# Altium integrated library Ali-padash.IntLib: 1012 symbols (part 2 of 5)
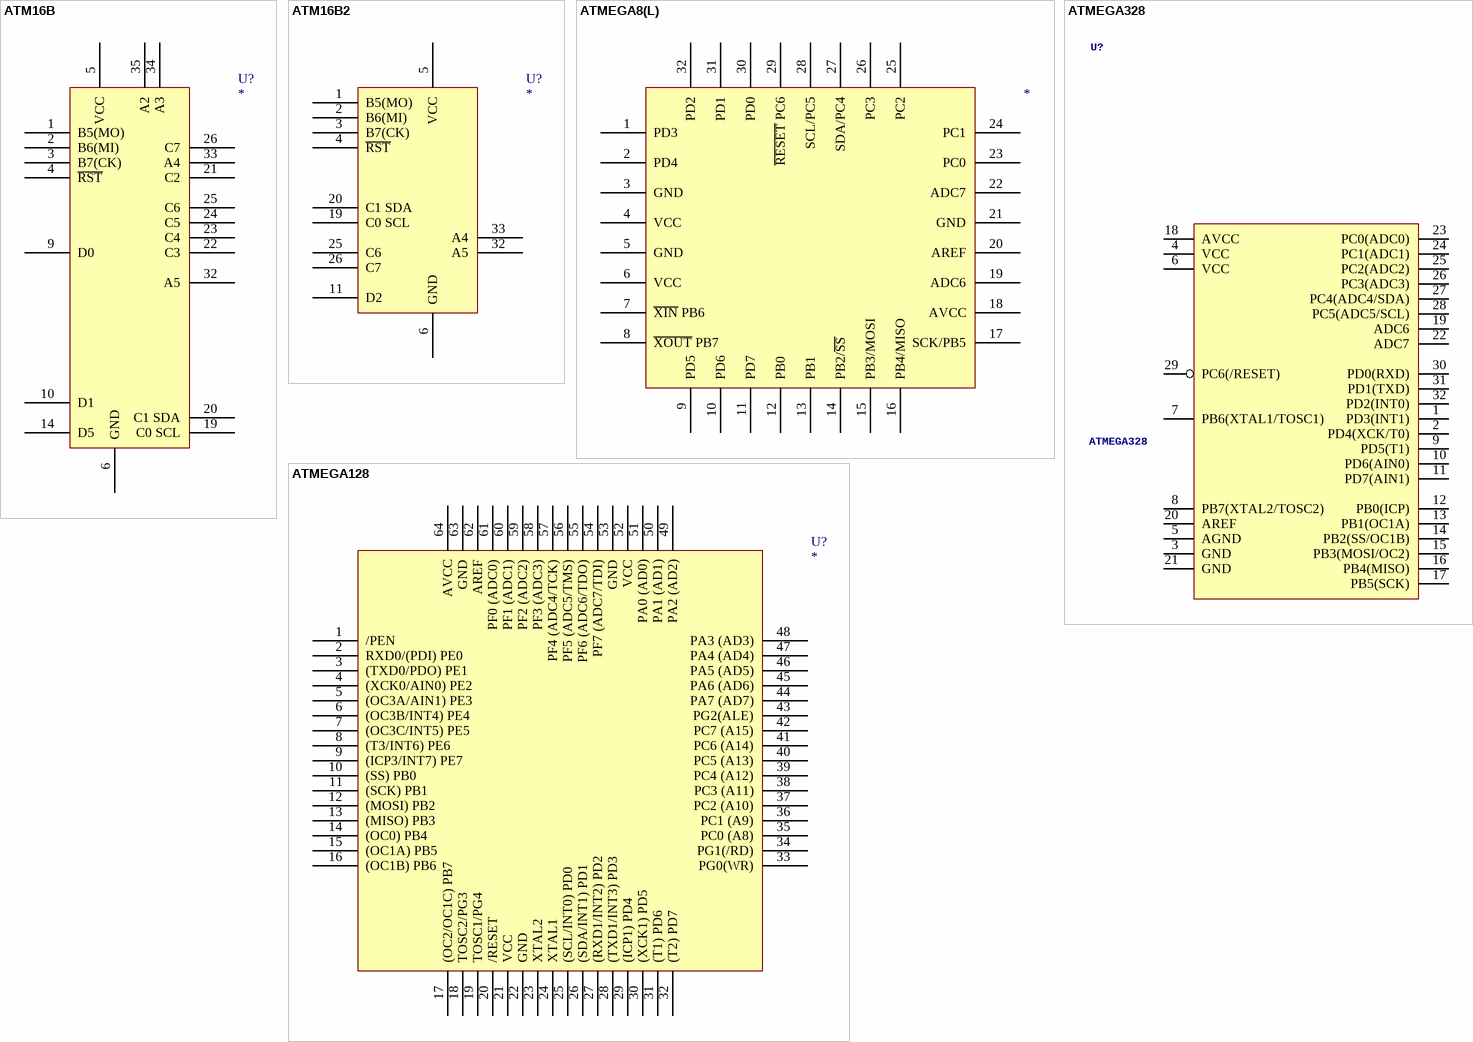
[diagram p80: symbols ATM16B to ATMEGA328]

## ATM16B
designator U?
footprint 44A
pins: 1 B5(MO), 2 B6(MI), 3 B7(CK), 4 ~{RST}, 5 VCC, 6 GND, 9 D0, 10 D1, 14 D5, 19 C0 SCL, 20 C1 SDA, 21 C2, 22 C3, 23 C4, 24 C5, 25 C6, 26 C7, 32 A5, 33 A4, 34 A3, 35 A2

## ATM16B2
designator U?
footprint 44A
pins: 1 B5(MO), 2 B6(MI), 3 B7(CK), 4 ~{RST}, 5 VCC, 6 GND, 11 D2, 19 C0 SCL, 20 C1 SDA, 25 C6, 26 C7, 32 A5, 33 A4

## ATMEGA8(L)
designator ?
U?
footprint TQFP32
pins: 1 PD3, 2 PD4, 3 GND, 4 VCC, 5 GND, 6 VCC, 7 ~{XIN} PB6, 8 ~{XOUT} PB7, 9 PD5, 10 PD6, 11 PD7, 12 PB0, 13 PB1, 14 PB2/~{SS}, 15 PB3/MOSI, 16 PB4/MISO, 17 SCK/PB5, 18 AVCC, 19 ADC6, 20 AREF, 21 GND, 22 ADC7, 23 PC0, 24 PC1, 25 PC2, 26 PC3, 27 SDA/PC4, 28 SCL/PC5, 29 ~{RESET} PC6, 30 PD0, 31 PD1, 32 PD2

## ATMEGA128
designator U?
footprint 64A
pins: 1 /PEN, 2 RXD0/(PDI) PE0, 3 (TXD0/PDO) PE1, 4 (XCK0/AIN0) PE2, 5 (OC3A/AIN1) PE3, 6 (OC3B/INT4) PE4, 7 (OC3C/INT5) PE5, 8 (T3/INT6) PE6, 9 (ICP3/INT7) PE7, 10 (SS) PB0, 11 (SCK) PB1, 12 (MOSI) PB2, 13 (MISO) PB3, 14 (OC0) PB4, 15 (OC1A) PB5, 16 (OC1B) PB6, 17 (OC2/OC1C) PB7, 18 TOSC2/PG3, 19 TOSC1/PG4, 20 /RESET, 21 VCC, 22 GND, 23 XTAL2, 24 XTAL1, 25 (SCL/INT0) PD0, 26 (SDA/INT1) PD1, 27 (RXD1/INT2) PD2, 28 (TXD1/INT3) PD3, 29 (ICP1) PD4, 30 (XCK1) PD5, 31 (T1) PD6, 32 (T2) PD7, 33 PG0(WR), 34 PG1(/RD), 35 PC0 (A8), 36 PC1 (A9), 37 PC2 (A10), 38 PC3 (A11), 39 PC4 (A12), 40 PC5 (A13), 41 PC6 (A14), 42 PC7 (A15), 43 PG2(ALE), 44 PA7 (AD7), 45 PA6 (AD6), 46 PA5 (AD5), 47 PA4 (AD4), 48 PA3 (AD3), 49 PA2 (AD2), 50 PA1 (AD1), 51 PA0 (AD0), 52 VCC, 53 GND, 54 PF7 (ADC7/TDI), 55 PF6 (ADC6/TDO), 56 PF5 (ADC5/TMS), 57 PF4 (ADC4/TCK), 58 PF3 (ADC3), 59 PF2 (ADC2), 60 PF1 (ADC1), 61 PF0 (ADC0), 62 AREF, 63 GND, 64 AVCC

## ATMEGA328
designator U?
footprint TQFP32-08
pins: 1 PD3(INT1), 2 PD4(XCK/T0), 3 GND, 4 VCC, 5 AGND, 6 VCC, 7 PB6(XTAL1/TOSC1), 8 PB7(XTAL2/TOSC2), 9 PD5(T1), 10 PD6(AIN0), 11 PD7(AIN1), 12 PB0(ICP), 13 PB1(OC1A), 14 PB2(SS/OC1B), 15 PB3(MOSI/OC2), 16 PB4(MISO), 17 PB5(SCK), 18 AVCC, 19 ADC6, 20 AREF, 21 GND, 22 ADC7, 23 PC0(ADC0), 24 PC1(ADC1), 25 PC2(ADC2), 26 PC3(ADC3), 27 PC4(ADC4/SDA), 28 PC5(ADC5/SCL), 29 PC6(/RESET), 30 PD0(RXD), 31 PD1(TXD), 32 PD2(INT0)

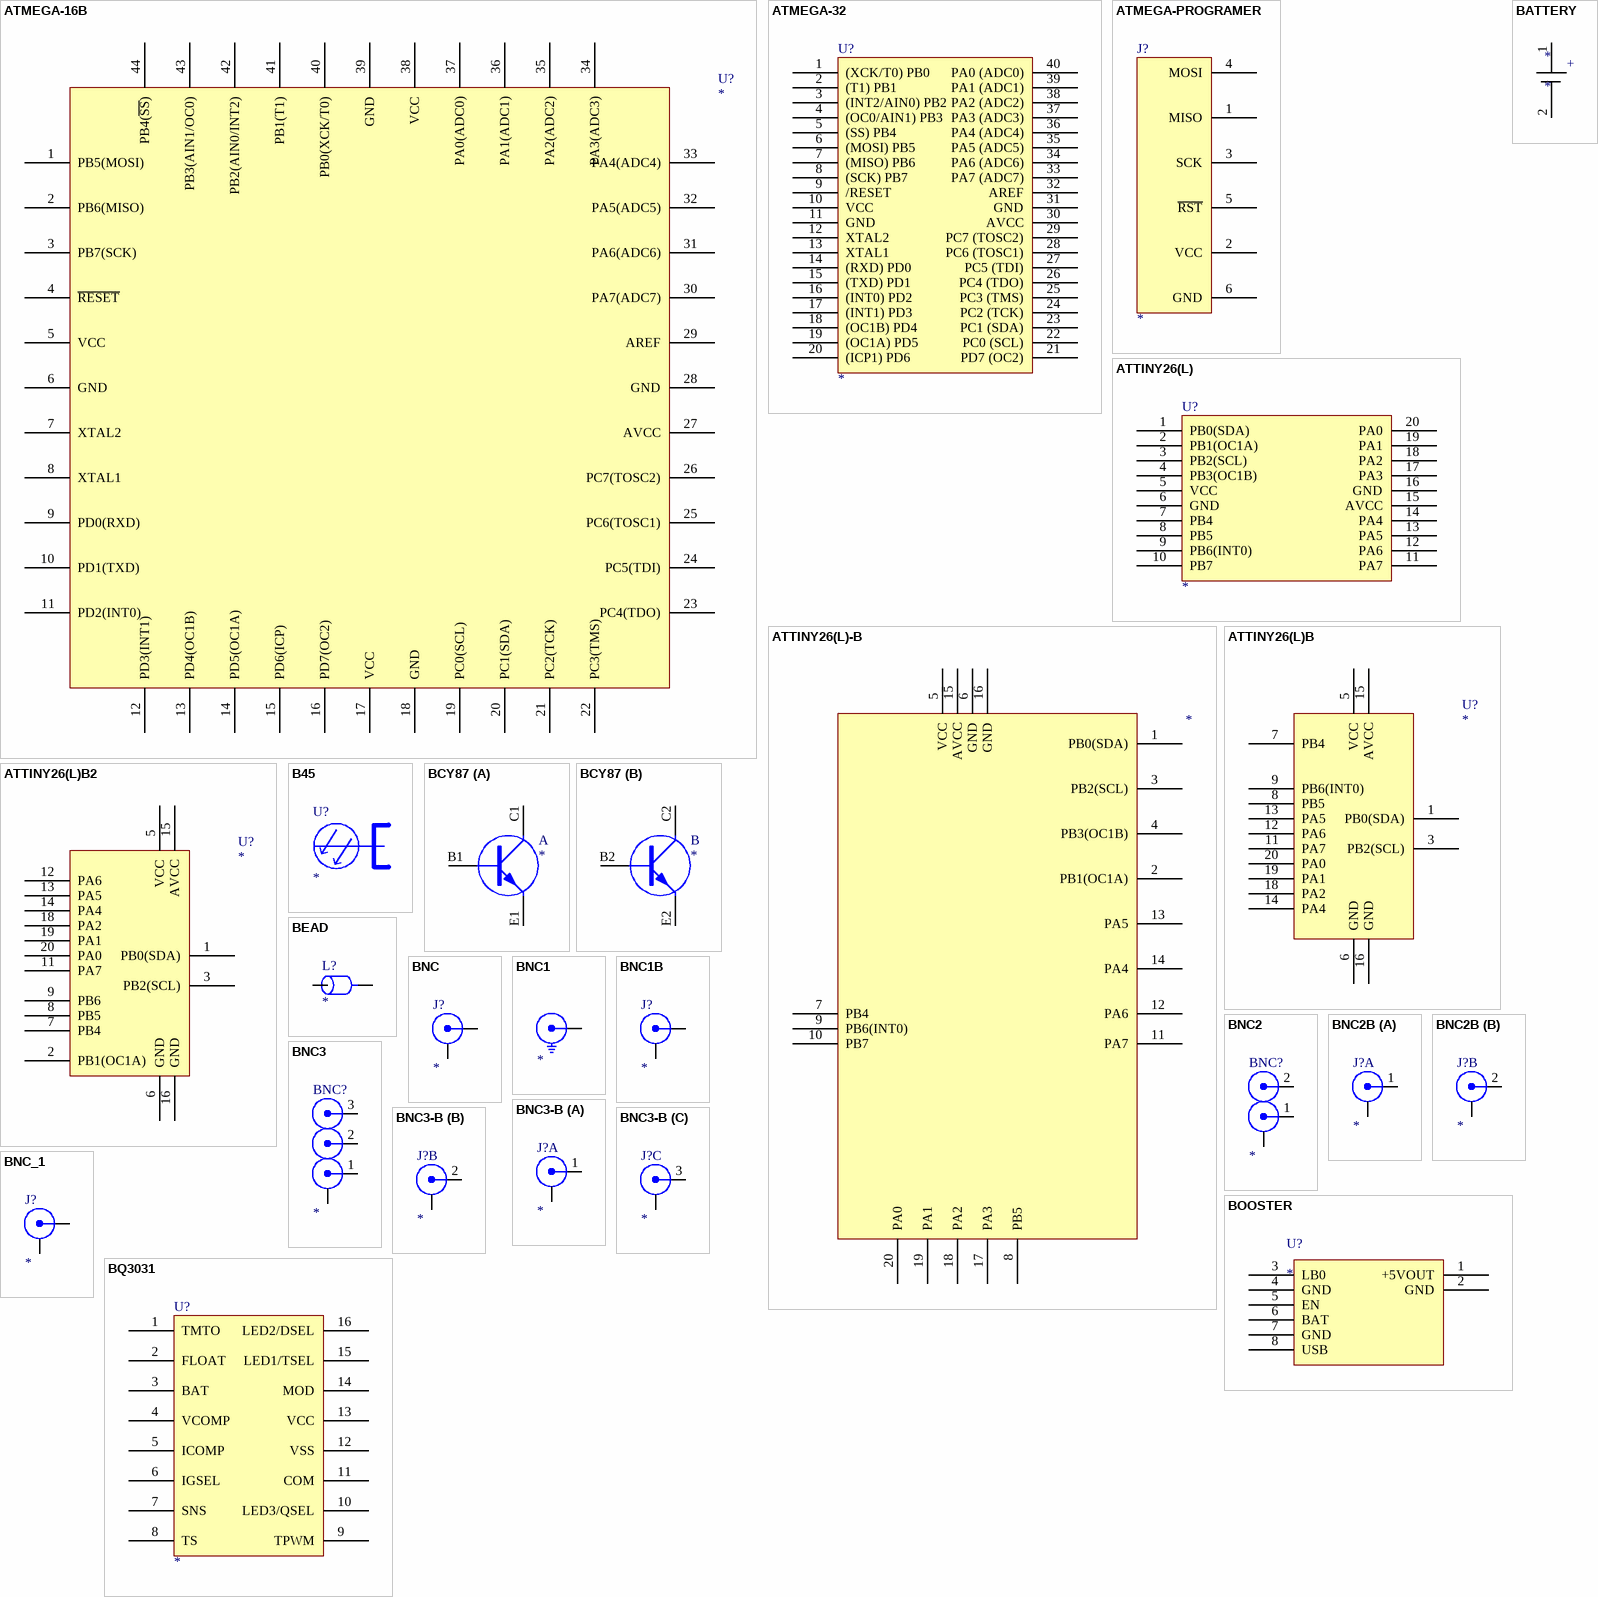
[diagram p16: symbols ATMEGA-16B to BQ3031]

## ATMEGA-16B
designator U?
footprint TQFP44
pins: 1 PB5(MOSI), 2 PB6(MISO), 3 PB7(SCK), 4 ~{RESET}, 5 VCC, 6 GND, 7 XTAL2, 8 XTAL1, 9 PD0(RXD), 10 PD1(TXD), 11 PD2(INT0), 12 PD3(INT1), 13 PD4(OC1B), 14 PD5(OC1A), 15 PD6(ICP), 16 PD7(OC2), 17 VCC, 18 GND, 19 PC0(SCL), 20 PC1(SDA), 21 PC2(TCK), 22 PC3(TMS), 23 PC4(TDO), 24 PC5(TDI), 25 PC6(TOSC1), 26 PC7(TOSC2), 27 AVCC, 28 GND, 29 AREF, 30 PA7(ADC7), 31 PA6(ADC6), 32 PA5(ADC5), 33 PA4(ADC4), 34 PA3(ADC3), 35 PA2(ADC2), 36 PA1(ADC1), 37 PA0(ADC0), 38 VCC, 39 GND, 40 PB0(XCK/T0), 41 PB1(T1), 42 PB2(AIN0/INT2), 43 PB3(AIN1/OC0), 44 PB4(~{SS})

## ATMEGA-32
designator U?
footprint DIP40
pins: 1 (XCK/T0) PB0, 2 (T1) PB1, 3 (INT2/AIN0) PB2, 4 (OC0/AIN1) PB3, 5 (SS) PB4, 6 (MOSI) PB5, 7 (MISO) PB6, 8 (SCK) PB7, 9 /RESET, 10 VCC, 11 GND, 12 XTAL2, 13 XTAL1, 14 (RXD) PD0, 15 (TXD) PD1, 16 (INT0) PD2, 17 (INT1) PD3, 18 (OC1B) PD4, 19 (OC1A) PD5, 20 (ICP1) PD6, 21 PD7 (OC2), 22 PC0 (SCL), 23 PC1 (SDA), 24 PC2 (TCK), 25 PC3 (TMS), 26 PC4 (TDO), 27 PC5 (TDI), 28 PC6 (TOSC1), 29 PC7 (TOSC2), 30 AVCC, 31 GND, 32 AREF, 33 PA7 (ADC7), 34 PA6 (ADC6), 35 PA5 (ADC5), 36 PA4 (ADC4), 37 PA3 (ADC3), 38 PA2 (ADC2), 39 PA1 (ADC1), 40 PA0 (ADC0)

## ATMEGA-PROGRAMER
designator J?
footprint CON6/CON
pins: 1 MISO, 2 VCC, 3 SCK, 4 MOSI, 5 ~{RST}, 6 GND

## ATTINY26(L)
designator U?
footprint DIP20
pins: 1 PB0(SDA), 2 PB1(OC1A), 3 PB2(SCL), 4 PB3(OC1B), 5 VCC, 6 GND, 7 PB4, 8 PB5, 9 PB6(INT0), 10 PB7, 11 PA7, 12 PA6, 13 PA5, 14 PA4, 15 AVCC, 16 GND, 17 PA3, 18 PA2, 19 PA1, 20 PA0

## ATTINY26(L)-B
designator ?
pins: 1 PB0(SDA), 2 PB1(OC1A), 3 PB2(SCL), 4 PB3(OC1B), 5 VCC, 6 GND, 7 PB4, 8 PB5, 9 PB6(INT0), 10 PB7, 11 PA7, 12 PA6, 13 PA5, 14 PA4, 15 AVCC, 16 GND, 17 PA3, 18 PA2, 19 PA1, 20 PA0

## ATTINY26(L)B
designator U?
footprint DIP20
pins: 1 PB0(SDA), 3 PB2(SCL), 5 VCC, 6 GND, 7 PB4, 8 PB5, 9 PB6(INT0), 11 PA7, 12 PA6, 13 PA5, 14 PA4, 15 AVCC, 16 GND, 18 PA2, 19 PA1, 20 PA0

## ATTINY26(L)B2
designator U?
footprint DIP20
pins: 1 PB0(SDA), 2 PB1(OC1A), 3 PB2(SCL), 5 VCC, 6 GND, 7 PB4, 8 PB5, 9 PB6, 11 PA7, 12 PA6, 13 PA5, 14 PA4, 15 AVCC, 16 GND, 18 PA2, 19 PA1, 20 PA0

## B45
designator U?

## BATTERY
designator *
pins: 1, 2
text: +

## BCY87
designator ?
part A pins: B1 B, C1 C, E1 E
part B pins: B2 B, C2 C, E2 E

## BEAD
designator L?
footprint BEAD
pins: 1, 2

## BNC
designator J?
footprint JAK-BNC3
pins: 1, 2

## BNC1
designator ?
pins: 1, G GND hidden to GND

## BNC1B
designator J?
footprint BNC1-CANARE
pins: 1, G

## BNC2
designator BNC?
footprint BNC2-CANARE
pins: 1, 2, G

## BNC2B
designator J?
footprint BNC2-CANARE
part A pins: 1, G
part B pins: 2, G

## BNC3
designator BNC?
footprint BNC3-CANARE
pins: 1, 2, 3, G

## BNC3-B
designator J?
footprint BNC3-CANARE
part A pins: 1, G
part B pins: 2, G
part C pins: 3, G

## BNC_1
designator J?
footprint JAK-BNC3
pins: 1, 2

## BOOSTER
designator U?
footprint booster
pins: 1 +5VOUT, 2 GND, 3 LB0, 4 GND, 5 EN, 6 BAT, 7 GND, 8 USB

## BQ3031
designator U?
footprint DIP16
footprint SO-16
pins: 1 TMTO, 2 FLOAT, 3 BAT, 4 VCOMP, 5 ICOMP, 6 IGSEL, 7 SNS, 8 TS, 9 TPWM, 10 LED3/QSEL, 11 COM, 12 VSS, 13 VCC, 14 MOD, 15 LED1/TSEL, 16 LED2/DSEL

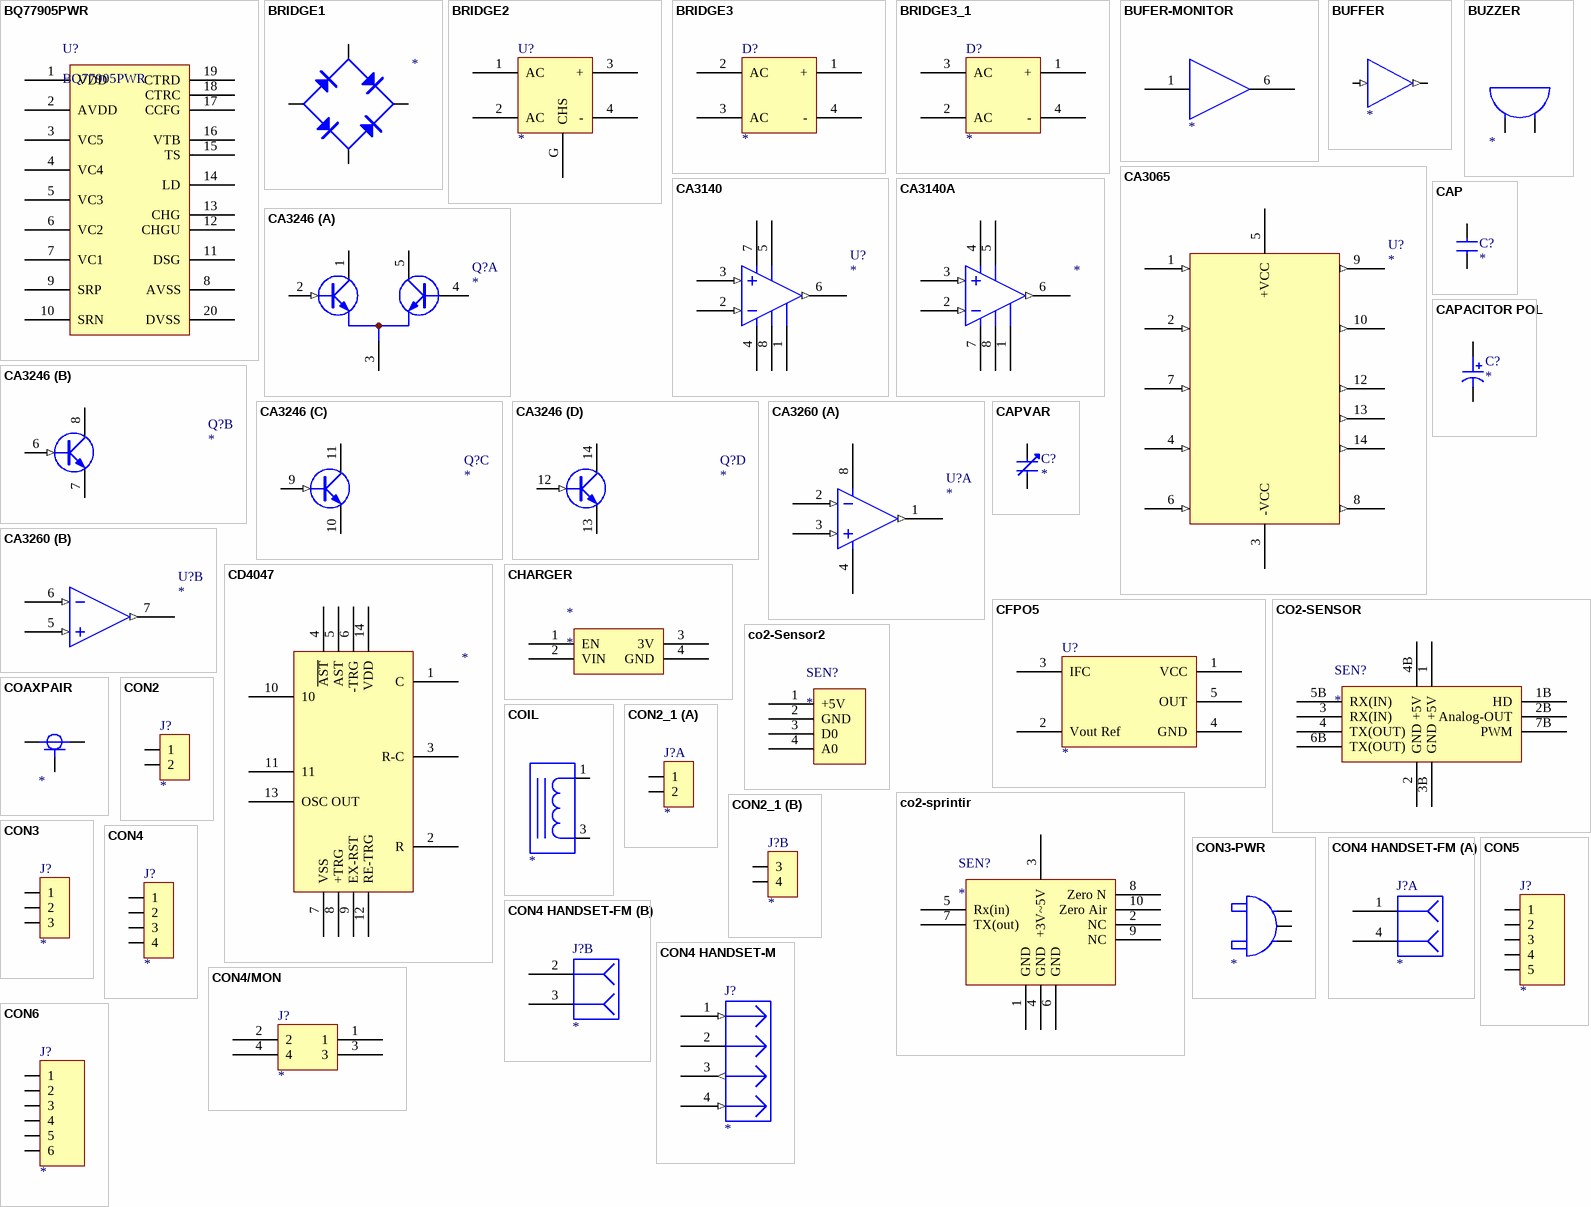
[diagram p17: symbols BQ77905PWR to CON6]

## BQ77905PWR
designator U?
pins: 1 VDD, 2 AVDD, 3 VC5, 4 VC4, 5 VC3, 6 VC2, 7 VC1, 8 AVSS, 9 SRP, 10 SRN, 11 DSG, 12 CHGU, 13 CHG, 14 LD, 15 TS, 16 VTB, 17 CCFG, 18 CTRC, 19 CTRD, 20 DVSS

## BRIDGE1
designator ?
pins: 1, 2, 3, 4

## BRIDGE2
designator U?
footprint BRIDGE
pins: 1 AC, 2 AC, 3 +, 4 -, G CHS

## BRIDGE3
designator D?
footprint BRG-1
pins: 1 +, 2 AC, 3 AC, 4 -

## BRIDGE3_1
designator D?
footprint BRG-1
pins: 1 +, 2 AC, 3 AC, 4 -

## BUFER-MONITOR
designator ?
pins: 1, 2 +12V hidden to +12V, 3 GND hidden to GND, 4 +12V hidden to +12V, 5 GND hidden to GND, 6

## BUFFER
designator ?
pins: 1 (in), 2 (out)

## BUZZER
designator ?
pins: 1, 2

## CA3065
designator U?
pins: 1 (in), 2 (in), 3 -VCC, 4 (in), 5 +VCC, 6 (in), 7 (in), 8 (out), 9 (out), 10 (out), 12 (out), 13 (out), 14 (out)

## CA3140
designator U?
pins: 1 COMP3, 2 -IN (in), 3 +IN (in), 4 V-, 5 COMP1, 6 OUT (out), 7 V+, 8 COMP2

## CA3140A
designator ?
pins: 1 COMP3, 2 -IN (in), 3 +IN (in), 4 V-, 5 COMP1, 6 OUT (out), 7 V+, 8 COMP2

## CA3246
designator Q?
part A pins: 1 C, 2 B (in), 3 E, 4, 5
part B pins: 6 B (in), 7 E, 8 C
part C pins: 9 B (in), 10 E, 11 C
part D pins: 12 B (in), 13 E, 14 C

## CA3260
designator U?
part A pins: 1 OUT (out), 2 -IN (in), 3 +IN (in), 4 V-, 8 V+
part B pins: 5 +IN (in), 6 -IN (in), 7 OUT (out)

## CAP
designator C?
footprint 1005
footprint CAP0.4
footprint 0402
footprint RAD0.
pins: 1, 2

## CAPACITOR POL
designator C?
pins: 1, 2

## CAPVAR
designator C?
footprint TERIMER-2
pins: 1, 2

## CD4047
designator ?
pins: 1 C, 2 R, 3 R-C, 4 ~{AST}, 5 AST, 6 -TRG, 7 VSS, 8 +TRG, 9 EX-RST, 10, 11, 12 RE-TRG, 13 OSC OUT, 14 VDD

## CFPO5
designator U?
footprint VCO-2
pins: 1 VCC, 2 Vout Ref, 3 IFC, 4 GND, 5 OUT

## CHARGER
designator *
footprint LI-ION-CHARGER
pins: 1 EN, 2 VIN, 3 3V, 4 GND

## CO2-SENSOR
designator SEN?
footprint MH-z16 -board
pins: 1 +5V, 1B HD, 2 GND, 2B Analog-OUT, 3 RX(IN), 3B GND, 4 TX(OUT), 4B +5V, 5B RX(IN), 6B TX(OUT), 7B PWM

## co2-Sensor2
designator SEN?
footprint sprinyir
pins: 1 +5V, 2 GND, 3 D0, 4 A0

## co2-sprintir
designator SEN?
footprint sprinyir
pins: 1 GND, 2 NC, 3 +3V~5V, 4 GND, 5 Rx(in), 6 GND, 7 TX(out), 8 Zero N, 9 NC, 10 Zero Air

## COAXPAIR
designator ?
pins: 1, 2, 3

## COIL
designator ?
pins: 1, 3

## CON2
designator J?
pins: 1, 2

## CON2_1
designator J?
part A pins: 1, 2
part B pins: 3, 4

## CON3
designator J?
pins: 1, 2, 3

## CON3-PWR
designator ?
pins: 1, 2, 3

## CON4
designator J?
pins: 1, 2, 3, 4

## CON4 HANDSET-FM
designator J?
part A pins: 1, 4
part B pins: 2, 3

## CON4 HANDSET-M
designator J?
pins: 1 SPK1 (in), 2 -MIC, 3 +MIC (out), 4 SPK2 (in)

## CON4/MON
designator J?
footprint IDC4
pins: 1, 2, 3, 4

## CON5
designator J?
pins: 1, 2, 3, 4, 5

## CON6
designator J?
pins: 1, 2, 3, 4, 5, 6

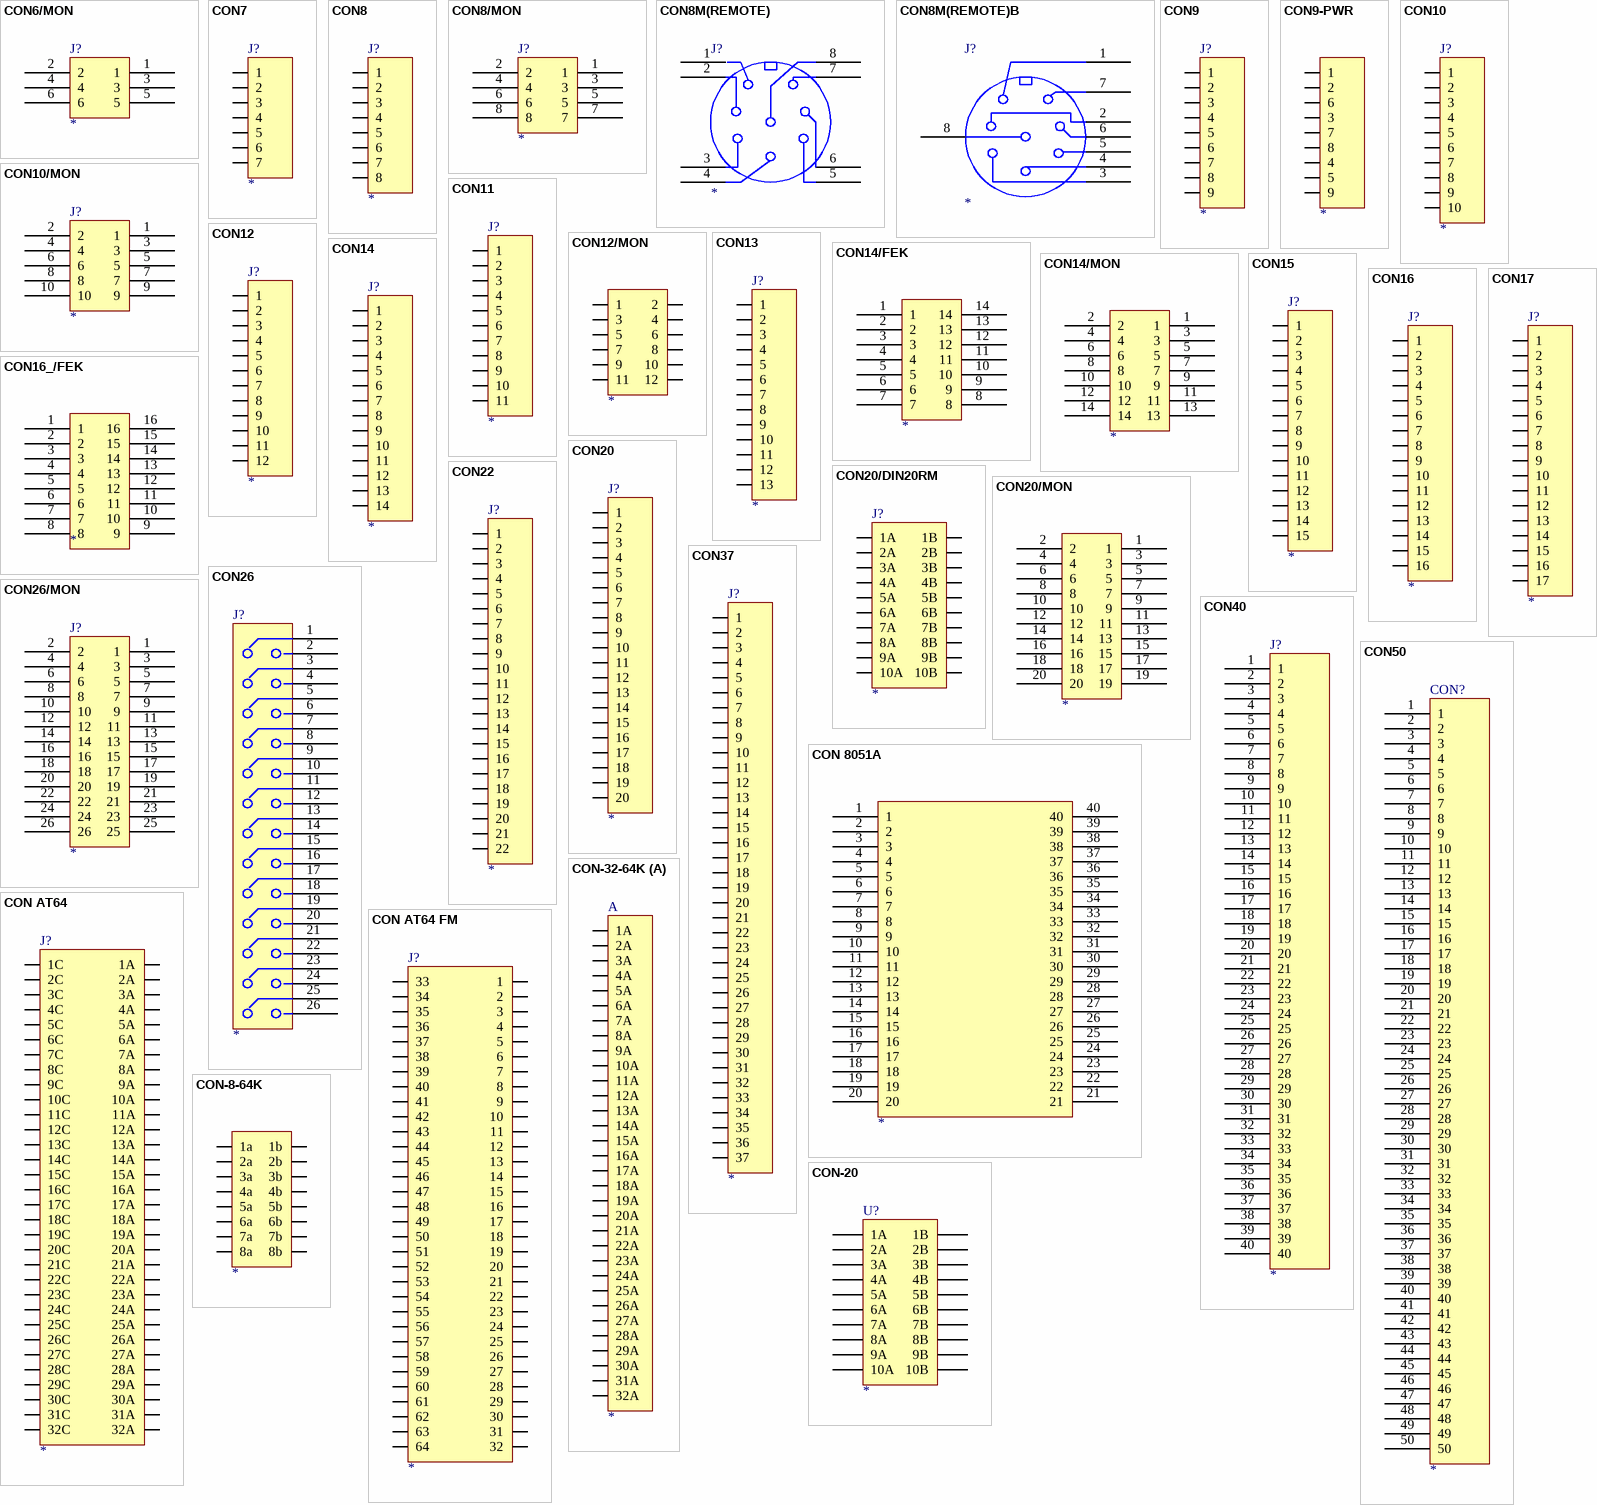
[diagram p18: symbols CON6/MON to CON-32-64K]

## CON6/MON
designator J?
footprint IDC6
pins: 1, 2, 3, 4, 5, 6

## CON7
designator J?
pins: 1, 2, 3, 4, 5, 6, 7

## CON8
designator J?
pins: 1, 2, 3, 4, 5, 6, 7, 8

## CON8/MON
designator J?
footprint IDCF8
pins: 1, 2, 3, 4, 5, 6, 7, 8

## CON8M(REMOTE)
designator J?
footprint CON8M
pins: 1, 2, 3, 4, 5, 6, 7, 8

## CON8M(REMOTE)B
designator J?
footprint CON8M
pins: 1, 2, 3, 4, 5, 6, 7, 8

## CON9
designator J?
pins: 1, 2, 3, 4, 5, 6, 7, 8, 9

## CON9-PWR
designator ?
pins: 1, 2, 3, 4, 5, 6, 7, 8, 9

## CON10
designator J?
pins: 1, 2, 3, 4, 5, 6, 7, 8, 9, 10

## CON10/MON
designator J?
footprint IDC10
pins: 1, 2, 3, 4, 5, 6, 7, 8, 9, 10

## CON11
designator J?
pins: 1, 2, 3, 4, 5, 6, 7, 8, 9, 10, 11

## CON12
designator J?
pins: 1, 2, 3, 4, 5, 6, 7, 8, 9, 10, 11, 12

## CON12/MON
designator ?
pins: 1, 2, 3, 4, 5, 6, 7, 8, 9, 10, 11, 12

## CON13
designator J?
pins: 1, 2, 3, 4, 5, 6, 7, 8, 9, 10, 11, 12, 13

## CON14
designator J?
pins: 1, 2, 3, 4, 5, 6, 7, 8, 9, 10, 11, 12, 13, 14

## CON14/FEK
designator ?
pins: 1, 2, 3, 4, 5, 6, 7, 8, 9, 10, 11, 12, 13, 14

## CON14/MON
designator ?
pins: 1, 2, 3, 4, 5, 6, 7, 8, 9, 10, 11, 12, 13, 14

## CON15
designator J?
pins: 1, 2, 3, 4, 5, 6, 7, 8, 9, 10, 11, 12, 13, 14, 15

## CON16
designator J?
pins: 1, 2, 3, 4, 5, 6, 7, 8, 9, 10, 11, 12, 13, 14, 15, 16

## CON16_/FEK
designator ?
pins: 1, 2, 3, 4, 5, 6, 7, 8, 9, 10, 11, 12, 13, 14, 15, 16

## CON17
designator J?
pins: 1, 2, 3, 4, 5, 6, 7, 8, 9, 10, 11, 12, 13, 14, 15, 16, 17

## CON20
designator J?
pins: 1, 2, 3, 4, 5, 6, 7, 8, 9, 10, 11, 12, 13, 14, 15, 16, 17, 18, 19, 20

## CON20/DIN20RM
designator J?
footprint DIN20RAF
pins: 1A, 1B, 2A, 2B, 3A, 3B, 4A, 4B, 5A, 5B, 6A, 6B, 7A, 7B, 8A, 8B, 9A, 9B, 10A, 10B

## CON20/MON
designator ?
pins: 1, 2, 3, 4, 5, 6, 7, 8, 9, 10, 11, 12, 13, 14, 15, 16, 17, 18, 19, 20

## CON22
designator J?
pins: 1, 2, 3, 4, 5, 6, 7, 8, 9, 10, 11, 12, 13, 14, 15, 16, 17, 18, 19, 20, 21, 22

## CON26
designator J?
footprint IDM26
pins: 1, 2, 3, 4, 5, 6, 7, 8, 9, 10, 11, 12, 13, 14, 15, 16, 17, 18, 19, 20, 21, 22, 23, 24, 25, 26

## CON26/MON
designator J?
footprint IDCF26
pins: 1, 2, 3, 4, 5, 6, 7, 8, 9, 10, 11, 12, 13, 14, 15, 16, 17, 18, 19, 20, 21, 22, 23, 24, 25, 26

## CON37
designator J?
pins: 1, 2, 3, 4, 5, 6, 7, 8, 9, 10, 11, 12, 13, 14, 15, 16, 17, 18, 19, 20, 21, 22, 23, 24, 25, 26, 27, 28, 29, 30, 31, 32, 33, 34, 35, 36, 37

## CON40
designator J?
pins: 1, 2, 3, 4, 5, 6, 7, 8, 9, 10, 11, 12, 13, 14, 15, 16, 17, 18, 19, 20, 21, 22, 23, 24, 25, 26, 27, 28, 29, 30, 31, 32, 33, 34, 35, 36, 37, 38, 39, 40

## CON50
designator CON?
Flat Cable Connector
pins: 1, 2, 3, 4, 5, 6, 7, 8, 9, 10, 11, 12, 13, 14, 15, 16, 17, 18, 19, 20, 21, 22, 23, 24, 25, 26, 27, 28, 29, 30, 31, 32, 33, 34, 35, 36, 37, 38, 39, 40, 41, 42, 43, 44, 45, 46, 47, 48, 49, 50

## CON 8051A
designator ?
pins: 1, 2, 3, 4, 5, 6, 7, 8, 9, 10, 11, 12, 13, 14, 15, 16, 17, 18, 19, 20, 21, 22, 23, 24, 25, 26, 27, 28, 29, 30, 31, 32, 33, 34, 35, 36, 37, 38, 39, 40

## CON AT64
designator J?
pins: 1A, 1C, 2A, 2C, 3A, 3C, 4A, 4C, 5A, 5C, 6A, 6C, 7A, 7C, 8A, 8C, 9A, 9C, 10A, 10C, 11A, 11C, 12A, 12C, 13A, 13C, 14A, 14C, 15A, 15C, 16A, 16C, 17A, 17C, 18A, 18C, 19A, 19C, 20A, 20C, 21A, 21C, 22A, 22C, 23A, 23C, 24A, 24C, 25A, 25C, 26A, 26C, 27A, 27C, 28A, 28C, 29A, 29C, 30A, 30C, 31A, 31C, 32A, 32C

## CON AT64 FM
designator J?
pins: 1, 2, 3, 4, 5, 6, 7, 8, 9, 10, 11, 12, 13, 14, 15, 16, 17, 18, 19, 20, 21, 22, 23, 24, 25, 26, 27, 28, 29, 30, 31, 32, 33, 34, 35, 36, 37, 38, 39, 40, 41, 42, 43, 44, 45, 46, 47, 48, 49, 50, 51, 52, 53, 54, 55, 56, 57, 58, 59, 60, 61, 62, 63, 64

## CON-8-64K
designator ?
pins: 1 1a, 1 1b, 2 2a, 2 2b, 3 3a, 3 3b, 4 4a, 4 4b, 5 5a, 5 5b, 6 6a, 6 6b, 7 7a, 7 7b, 8 8a, 8 8b

## CON-20
designator U?
footprint DIN20RAM
footprint DIN20RAF
pins: 1A, 1B, 2A, 2B, 3A, 3B, 4A, 4B, 5A, 5B, 6A, 6B, 7A, 7B, 8A, 8B, 9A, 9B, 10A, 10B

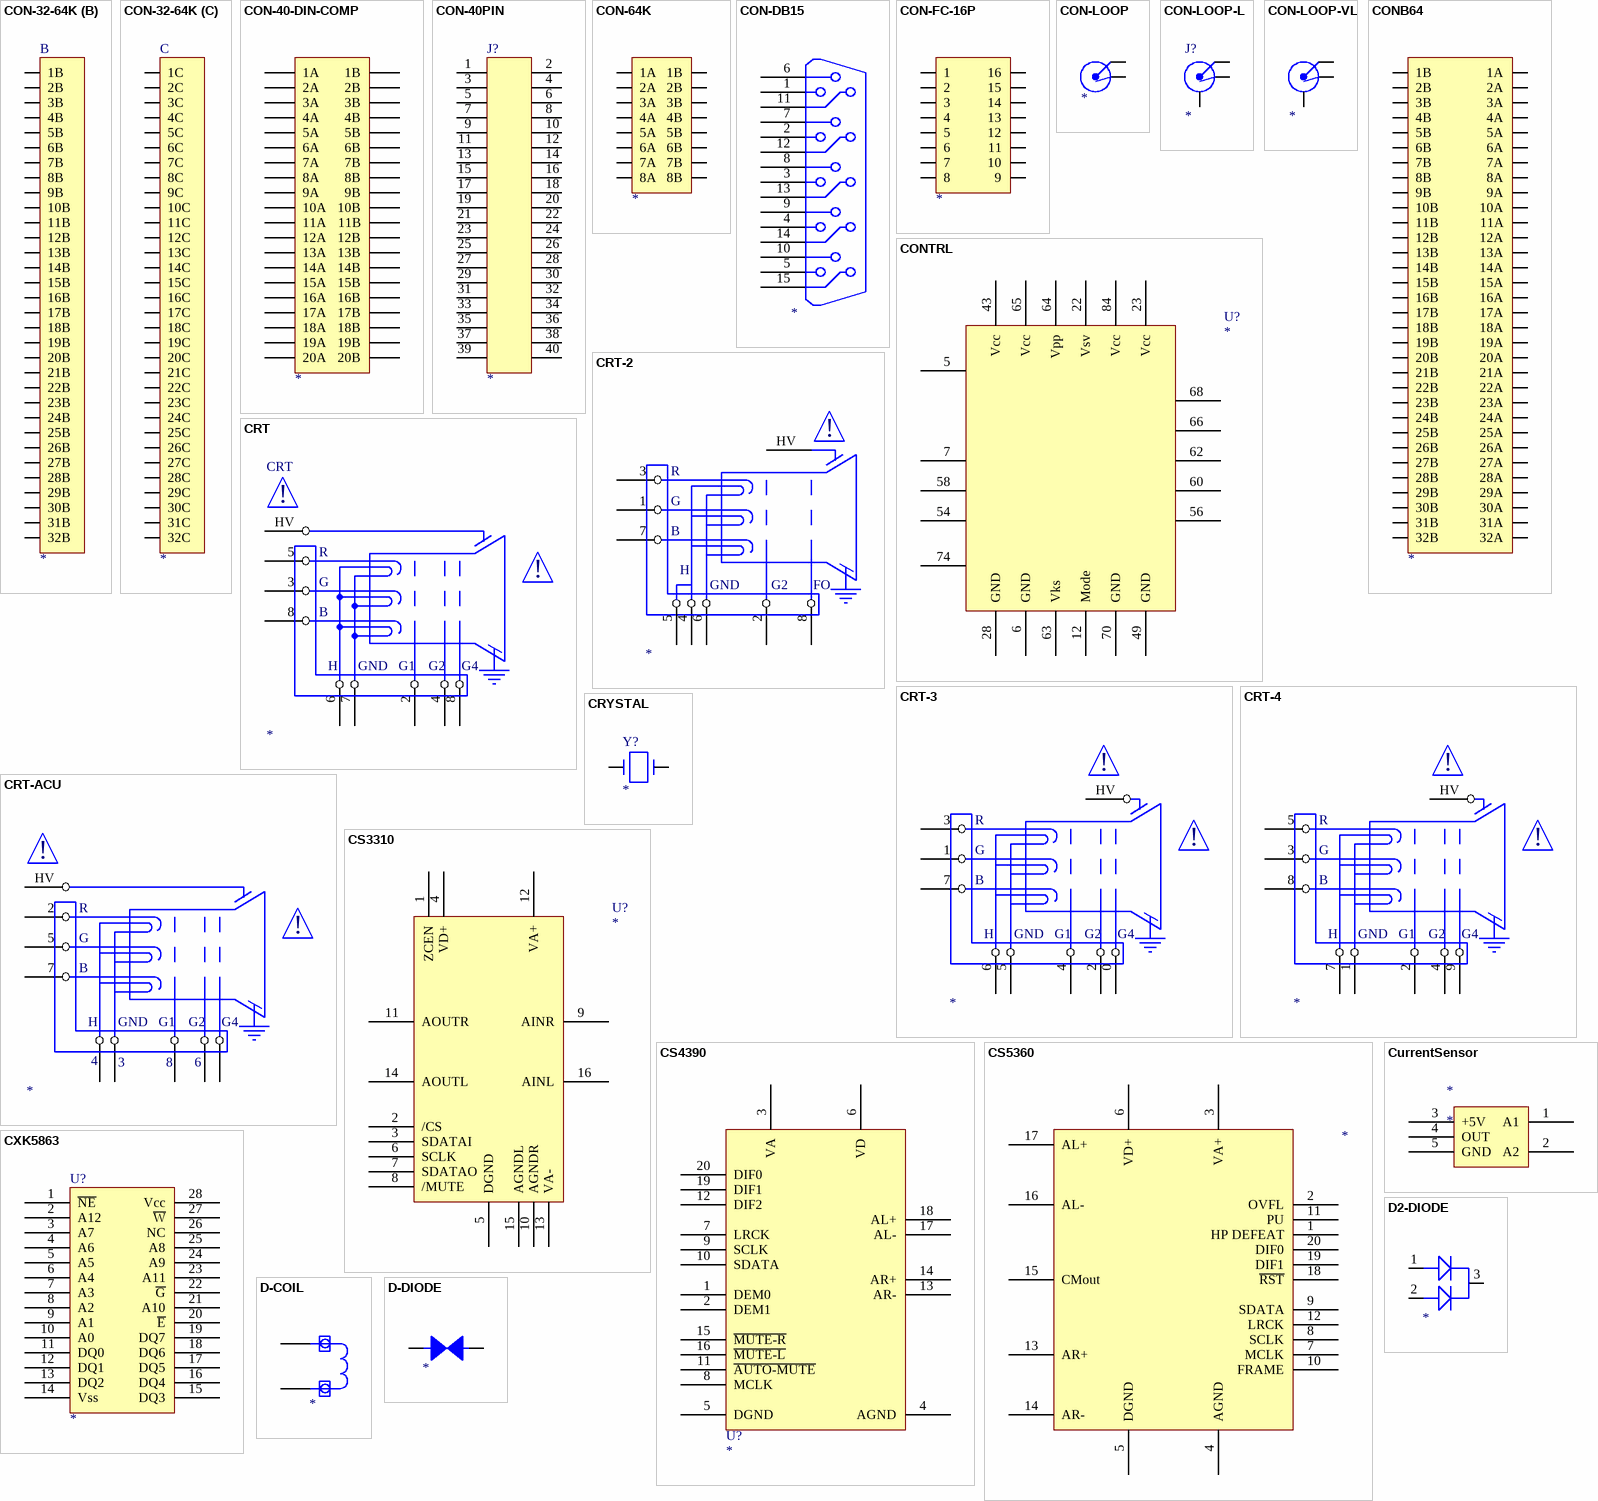
[diagram p19: symbols CON-32-64K to D-DIODE]

## CON-32-64K
designator ?
part A pins: 1A, 2A, 3A, 4A, 5A, 6A, 7A, 8A, 9A, 10A, 11A, 12A, 13A, 14A, 15A, 16A, 17A, 18A, 19A, 20A, 21A, 22A, 23A, 24A, 25A, 26A, 27A, 28A, 29A, 30A, 31A, 32A
part B pins: 1B, 2B, 3B, 4B, 5B, 6B, 7B, 8B, 9B, 10B, 11B, 12B, 13B, 14B, 15B, 16B, 17B, 18B, 19B, 20B, 21B, 22B, 23B, 24B, 25B, 26B, 27B, 28B, 29B, 30B, 31B, 32B
part C pins: 1C, 2C, 3C, 4C, 5C, 6C, 7C, 8C, 9C, 10C, 11C, 12C, 13C, 14C, 15C, 16C, 17C, 18C, 19C, 20C, 21C, 22C, 23C, 24C, 25C, 26C, 27C, 28C, 29C, 30C, 31C, 32C

## CON-40-DIN-COMP
designator ?
pins: 1 1A, 1 1B, 2 2A, 2 2B, 3 3A, 3 3B, 4 4A, 4 4B, 5 5A, 5 5B, 6 6A, 6 6B, 7 7A, 7 7B, 8 8A, 8 8B, 9 9A, 9 9B, 10 10A, 10 10B, 11 11A, 11 11B, 12 12A, 12 12B, 13 13A, 13 13B, 14 14A, 14 14B, 15 15A, 15 15B, 16 16A, 16 16B, 17 17A, 17 17B, 18 18A, 18 18B, 19 19A, 19 19B, 20 20A, 20 20B

## CON-40PIN
designator J?
pins: 1, 2, 3, 4, 5, 6, 7, 8, 9, 10, 11, 12, 13, 14, 15, 16, 17, 18, 19, 20, 21, 22, 23, 24, 25, 26, 27, 28, 29, 30, 31, 32, 33, 34, 35, 36, 37, 38, 39, 40

## CON-64K
designator ?
pins: 1A, 1B, 2A, 2B, 3A, 3B, 4A, 4B, 5A, 5B, 6A, 6B, 7A, 7B, 8A, 8B

## CON-DB15
designator ?
pins: 1, 2, 3, 4, 5, 6, 7, 8, 9, 10, 11, 12, 13, 14, 15

## CON-FC-16P
designator ?
pins: 1, 2, 3, 4, 5, 6, 7, 8, 9, 10, 11, 12, 13, 14, 15, 16

## CON-LOOP
designator ?
pins: 1, 2, G GND hidden to GND

## CON-LOOP-L
designator J?
pins: 1, 2, 3

## CON-LOOP-VL
designator ?
pins: 1, 2, G

## CONB64
designator ?
pins: 1A, 1B, 2A, 2B, 3A, 3B, 4A, 4B, 5A, 5B, 6A, 6B, 7A, 7B, 8A, 8B, 9A, 9B, 10A, 10B, 11A, 11B, 12A, 12B, 13A, 13B, 14A, 14B, 15A, 15B, 16A, 16B, 17A, 17B, 18A, 18B, 19A, 19B, 20A, 20B, 21A, 21B, 22A, 22B, 23A, 23B, 24A, 24B, 25A, 25B, 26A, 26B, 27A, 27B, 28A, 28B, 29A, 29B, 30A, 30B, 31A, 31B, 32A, 32B

## CONTRL
designator U?
pins: 5, 6 GND (power), 7, 12 Mode (power), 22 Vsv (power), 23 Vcc (power), 28 GND (power), 43 Vcc (power), 49 GND (power), 54, 56, 58, 60, 62, 63 Vks (power), 64 Vpp (power), 65 Vcc (power), 66, 68, 70 GND (power), 74, 84 Vcc (power)

## CRT
designator CRT
pins: 2, 3, 4, 5, 6, 7, 8, 8, HV
text: !; R; G; B; H; GND; G1; G2; G4

## CRT-2
designator ?
pins: 1, 2, 3, 4, 5, 6, 7, 8, HV
text: !; R; G; B; H; GND; G2; FO

## CRT-3
designator ?
pins: 0, 1, 2, 3, 4, 5, 6  , 7, HV
text: !; R; G; B; H; GND; G1; G2; G4

## CRT-4
designator ?
pins: 1, 2, 3, 4, 5, 7  , 8, 9, HV
text: !; R; G; B; H; GND; G1; G2; G4

## CRT-ACU
designator ?
pins: 2, 3, 4, 5, 7, ?1, ?2, ?3, HV
text: !; R; G; B; H; GND; G1; G2; G4; 8; 6

## CRYSTAL
designator Y?
footprint XTAL1
footprint XTALRA1
pins: 1, 2

## CS3310
designator U?
footprint SOL-16
pins: 1 ZCEN, 2 /CS, 3 SDATAI, 4 VD+, 5 DGND, 6 SCLK, 7 SDATAO, 8 /MUTE, 9 AINR, 10 AGNDR, 11 AOUTR, 12 VA+, 13 VA-, 14 AOUTL, 15 AGNDL, 16 AINL

## CS4390
designator U?
footprint SSOP20
pins: 1 DEM0, 2 DEM1, 3 VA, 4 AGND, 5 DGND, 6 VD, 7 LRCK, 8 MCLK, 9 SCLK, 10 SDATA, 11 ~{AUTO-MUTE}, 12 DIF2, 13 AR-, 14 AR+, 15 ~{MUTE-R}, 16 ~{MUTE-L}, 17 AL-, 18 AL+, 19 DIF1, 20 DIF0

## CS5360
designator ?
pins: 1 HP DEFEAT, 2 OVFL, 3 VA+, 4 AGND, 5 DGND, 6 VD+, 7 MCLK, 8 SCLK, 9 SDATA, 10 FRAME, 11 PU, 12 LRCK, 13 AR+, 14 AR-, 15 CMout, 16 AL-, 17 AL+, 18 ~{RST}, 19 DIF1, 20 DIF0

## CurrentSensor
designator *
footprint CurrentSensor (Footprint not found)
pins: 1 A1, 2 A2, 3 +5V, 4 OUT, 5 GND

## CXK5863
designator U?
footprint DIP28N
pins: 1 ~{NE}, 2 A12, 3 A7, 4 A6, 5 A5, 6 A4, 7 A3, 8 A2, 9 A1, 10 A0, 11 DQ0, 12 DQ1, 13 DQ2, 14 Vss, 15 DQ3, 16 DQ4, 17 DQ5, 18 DQ6, 19 DQ7, 20 ~{E}, 21 A10, 22 ~{G}, 23 A11, 24 A9, 25 A8, 26 NC, 27 ~{W}, 28 Vcc

## D2-DIODE
designator ?
pins: 1 A1, 2 C, 3 A2

## D-COIL
designator ?
pins: 5, 6

## D-DIODE
designator ?
pins: A, K

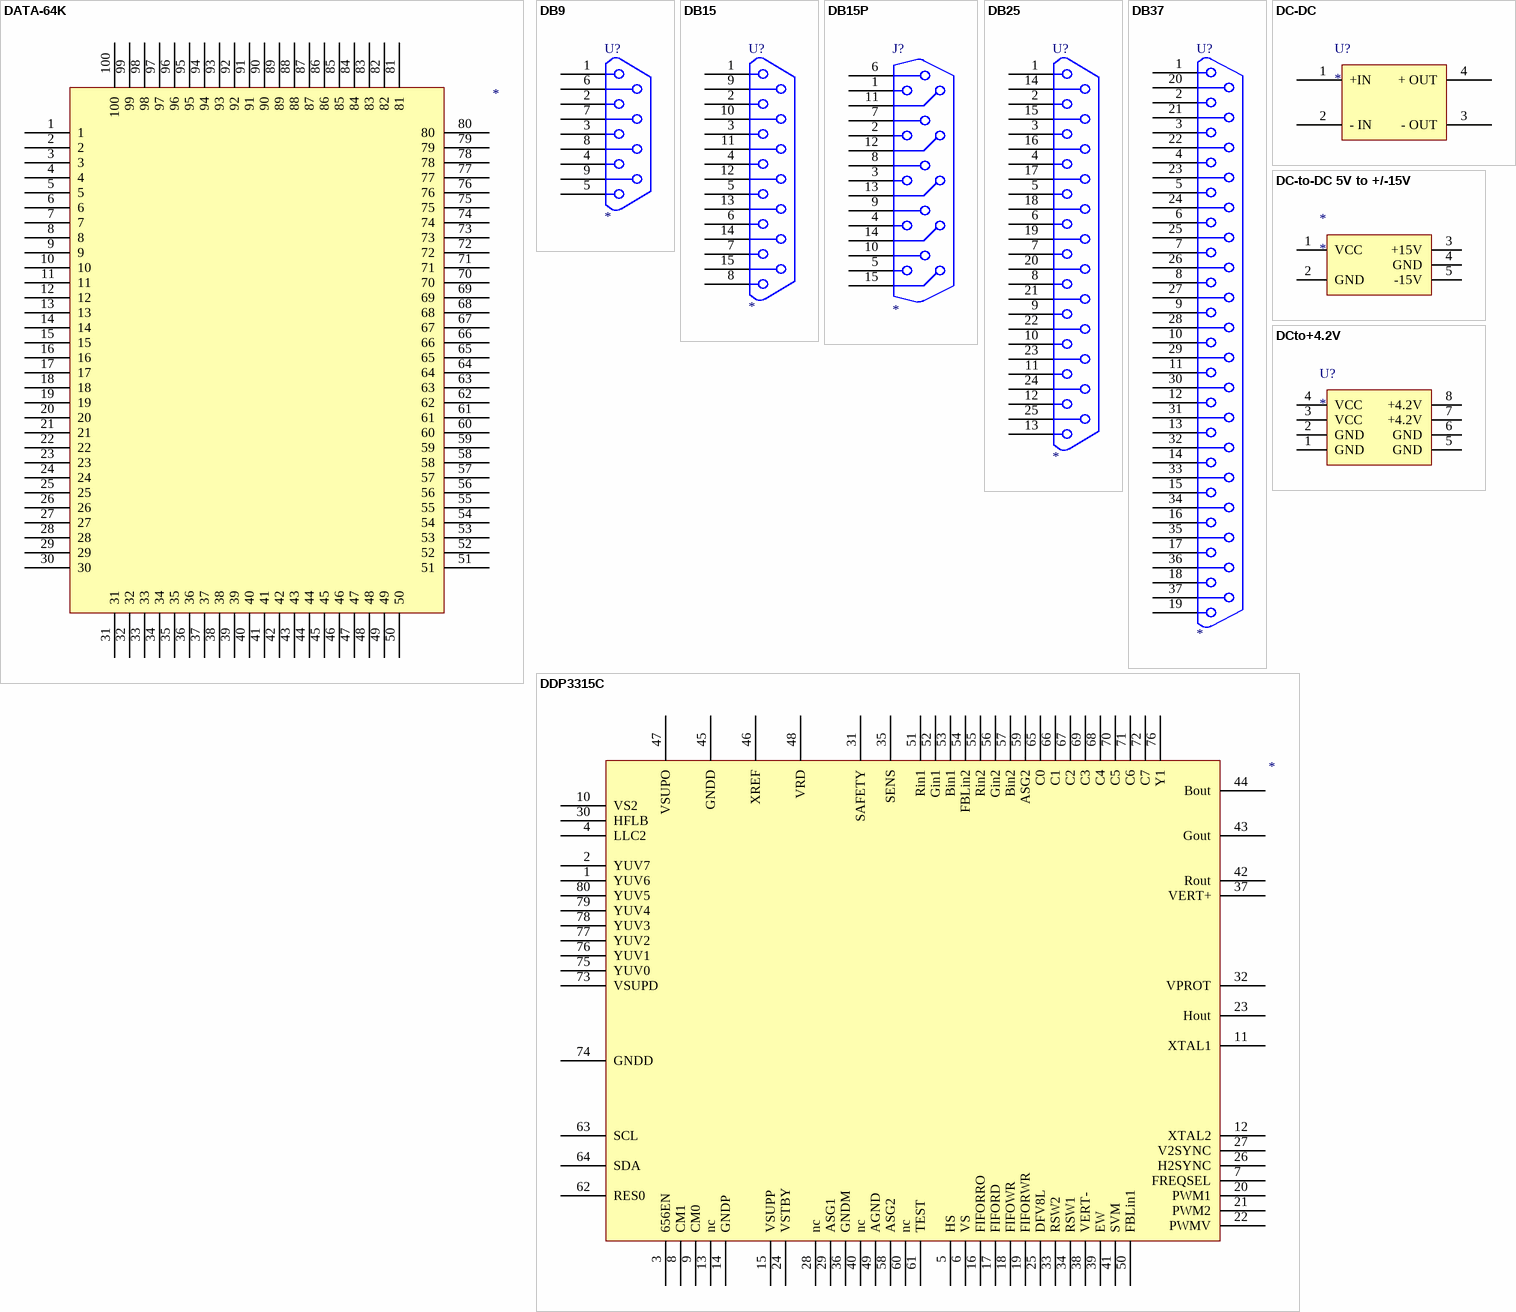
[diagram p20: symbols DATA-64K to DDP3315C]

## DATA-64K
designator ?
pins: 1, 2, 3, 4, 5, 6, 7, 8, 9, 10, 11, 12, 13, 14, 15, 16, 17, 18, 19, 20, 21, 22, 23, 24, 25, 26, 27, 28, 29, 30, 31, 32, 33, 34, 35, 36, 37, 38, 39, 40, 41, 42, 43, 44, 45, 46, 47, 48, 49, 50, 51, 52, 53, 54, 55, 56, 57, 58, 59, 60, 61, 62, 63, 64, 65, 66, 67, 68, 69, 70, 71, 72, 73, 74, 75, 76, 77, 78, 79, 80, 81, 82, 83, 84, 85, 86, 87, 88, 89, 90, 91, 92, 93, 94, 95, 96, 97, 98, 99, 100

## DB9
designator U?
footprint DB9
pins: 1, 2, 3, 4, 5, 6, 7, 8, 9

## DB15
designator U?
footprint DB15
pins: 1, 2, 3, 4, 5, 6, 7, 8, 9, 10, 11, 12, 13, 14, 15

## DB15P
designator J?
footprint DB15PRA/F
pins: 1, 2, 3, 4, 5, 6, 7, 8, 9, 10, 11, 12, 13, 14, 15

## DB25
designator U?
footprint DB25
pins: 1, 2, 3, 4, 5, 6, 7, 8, 9, 10, 11, 12, 13, 14, 15, 16, 17, 18, 19, 20, 21, 22, 23, 24, 25

## DB37
designator U?
footprint DB37
pins: 1, 2, 3, 4, 5, 6, 7, 8, 9, 10, 11, 12, 13, 14, 15, 16, 17, 18, 19, 20, 21, 22, 23, 24, 25, 26, 27, 28, 29, 30, 31, 32, 33, 34, 35, 36, 37

## DC-DC
designator U?
footprint CPT-1224-05
footprint LI-ION-CHARGER
pins: 1 +IN, 2 - IN, 3 - OUT, 4 + OUT

## DC-to-DC 5V to +/-15V
designator *
footprint DC-DC515
pins: 1 VCC, 2 GND, 3 +15V, 4 GND, 5 -15V

## DCto+4.2V
designator U?
pins: 1 GND, 2 GND, 3 VCC, 4 VCC, 5 GND, 6 GND, 7 +4.2V, 8 +4.2V

## DDP3315C
designator ?
U?
footprint PQFP80
pins: 1 YUV6, 2 YUV7, 3 656EN, 4 LLC2, 5 HS, 6 VS, 7 FREQSEL, 8 CM1, 9 CM0, 10 VS2, 11 XTAL1, 12 XTAL2, 13 nc, 14 GNDP, 15 VSUPP, 16 FIFORRO, 17 FIFORD, 18 FIFOWR, 19 FIFORWR, 20 PWM1, 21 PWM2, 22 PWMV, 23 Hout, 24 VSTBY, 25 DFV8L, 26 H2SYNC, 27 V2SYNC, 28 nc, 29 ASG1, 30 HFLB, 31 SAFETY, 32 VPROT, 33 RSW2, 34 RSW1, 35 SENS, 36 GNDM, 37 VERT+, 38 VERT-, 39 EW, 40 nc, 41 SVM, 42 Rout, 43 Gout, 44 Bout, 45 GNDD, 46 XREF, 47 VSUPO, 48 VRD, 49 AGND, 50 FBLin1, 51 Rin1, 52 Gin1, 53 Bin1, 54 FBLin2, 55 Rin2, 56 Gin2, 57 Bin2, 58 ASG2, 59 ASG2, 60 nc, 61 TEST, 62 RES0, 63 SCL, 64 SDA, 65 C0, 66 C1, 67 C2, 68 C4, 69 C3, 70 C5, 71 C6, 72 C7, 73 VSUPD, 74 GNDD, 75 YUV0, 76 YUV1, 76 Y1, 77 YUV2, 78 YUV3, 79 YUV4, 80 YUV5

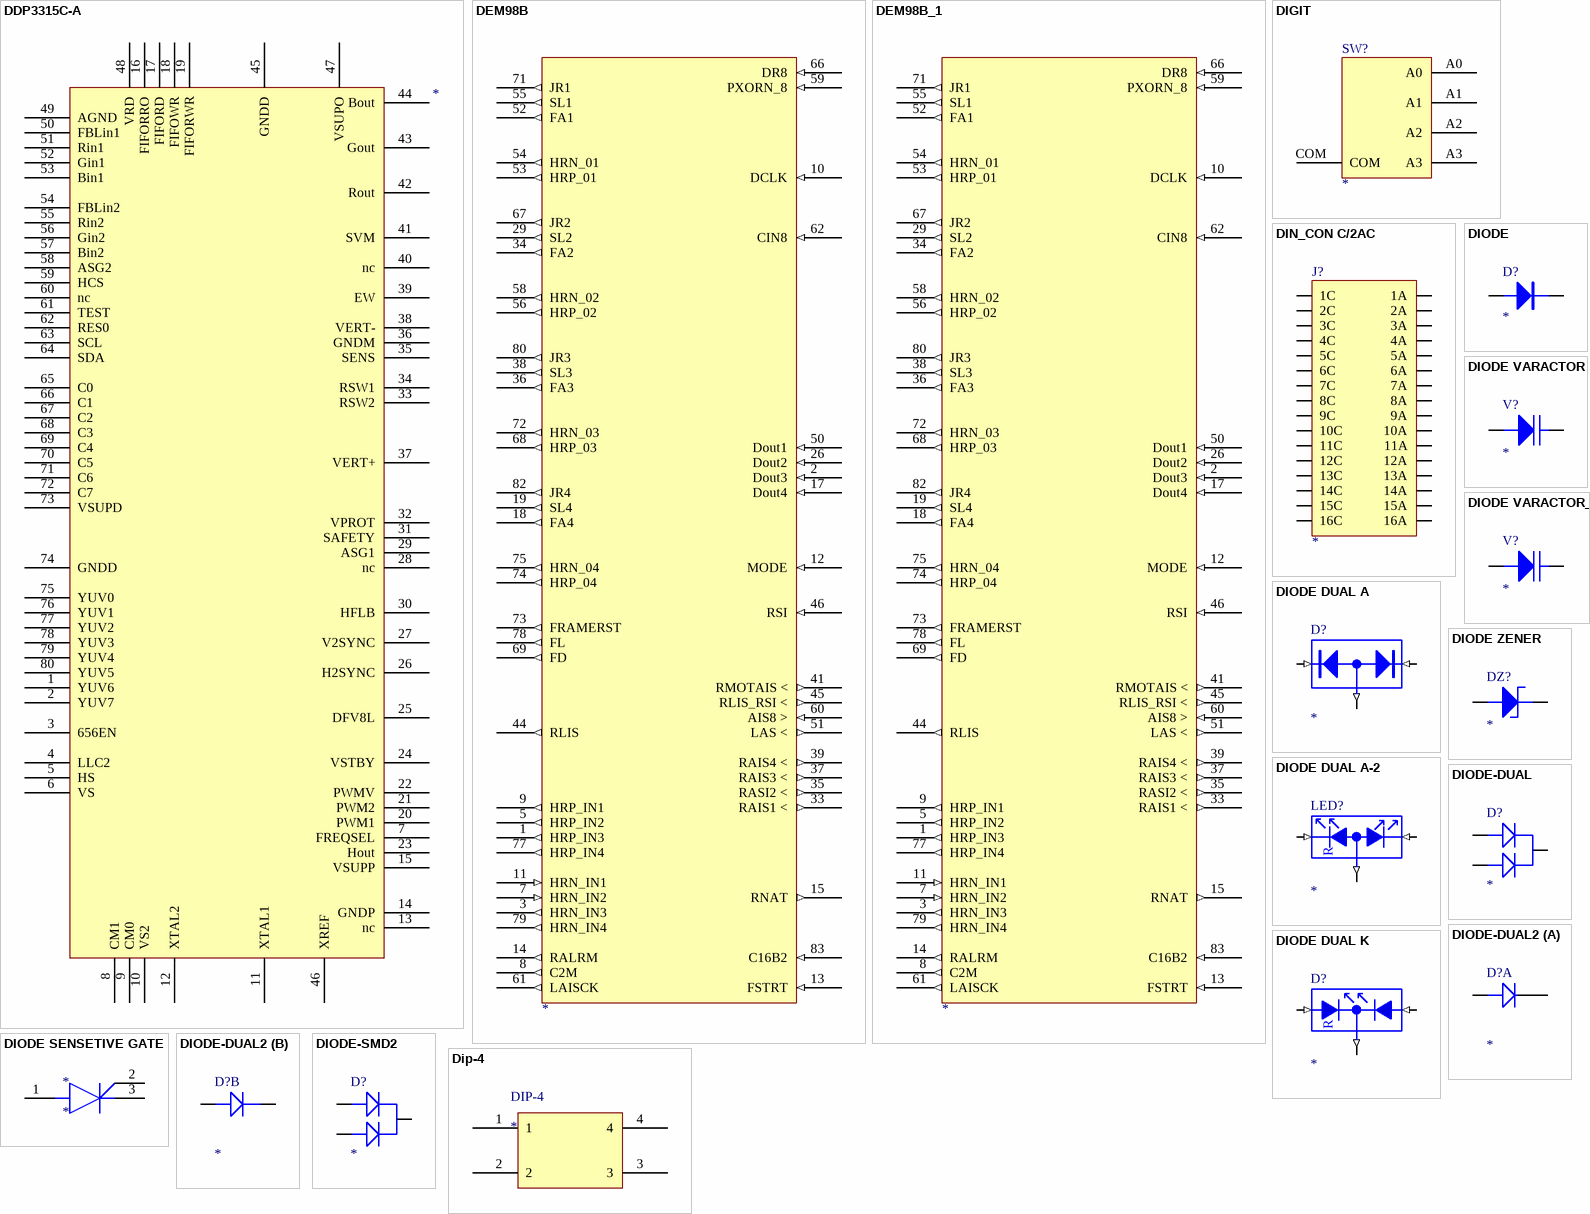
[diagram p21: symbols DDP3315C-A to Dip-4]

## DDP3315C-A
designator ?
U?
footprint PQFP80
pins: 1 YUV6, 2 YUV7, 3 656EN, 4 LLC2, 5 HS, 6 VS, 7 FREQSEL, 8 CM1, 9 CM0, 10 VS2, 11 XTAL1, 12 XTAL2, 13 nc, 14 GNDP, 15 VSUPP, 16 FIFORRO, 17 FIFORD, 18 FIFOWR, 19 FIFORWR, 20 PWM1, 21 PWM2, 22 PWMV, 23 Hout, 24 VSTBY, 25 DFV8L, 26 H2SYNC, 27 V2SYNC, 28 nc, 29 ASG1, 30 HFLB, 31 SAFETY, 32 VPROT, 33 RSW2, 34 RSW1, 35 SENS, 36 GNDM, 37 VERT+, 38 VERT-, 39 EW, 40 nc, 41 SVM, 42 Rout, 43 Gout, 44 Bout, 45 GNDD, 46 XREF, 47 VSUPO, 48 VRD, 49 AGND, 50 FBLin1, 51 Rin1, 52 Gin1, 53 Bin1, 54 FBLin2, 55 Rin2, 56 Gin2, 57 Bin2, 58 ASG2, 59 HCS, 60 nc, 61 TEST, 62 RES0, 63 SCL, 64 SDA, 65 C0, 66 C1, 67 C2, 68 C3, 69 C4, 70 C5, 71 C6, 72 C7, 73 VSUPD, 74 GNDD, 75 YUV0, 76 YUV1, 77 YUV2, 78 YUV3, 79 YUV4, 80 YUV5

## DEM98B
designator ?
pins: 1 HRP_IN3 (out), 2 Dout3 (in), 3 HRN_IN3 (out), 5 HRP_IN2 (out), 7 HRN_IN2 (in), 8 C2M (out), 9 HRP_IN1 (out), 10 DCLK (in), 11 HRN_IN1 (in), 12 MODE (in), 13 FSTRT (in), 14 RALRM (out), 15 RNAT (out), 17 Dout4 (in), 18 FA4 (out), 19 SL4 (out), 26 Dout2 (in), 29 SL2 (out), 33 RAIS1 < (out), 34 FA2 (out), 35 RASI2 < (out), 36 FA3 (out), 37 RAIS3 < (out), 38 SL3 (out), 39 RAIS4 < (out), 41 RMOTAIS < (out), 44 RLIS (out), 45 RLIS_RSI < (out), 46 RSI (in), 50 Dout1 (in), 51 LAS < (out), 52 FA1 (out), 53 HRP_01 (out), 54 HRN_01 (out), 55 SL1 (out), 56 HRP_02 (out), 58 HRN_02 (out), 59 PXORN_8 (in), 60 AIS8 > (in), 61 LAISCK (out), 62 CIN8 (in), 66 DR8 (in), 67 JR2 (out), 68 HRP_03 (out), 69 FD (out), 71 JR1 (out), 72 HRN_03 (out), 73 FRAMERST (out), 74 HRP_04 (out), 75 HRN_04 (out), 77 HRP_IN4 (out), 78 FL (out), 79 HRN_IN4 (out), 80 JR3 (out), 82 JR4 (out), 83 C16B2 (in)

## DEM98B_1
designator ?
pins: 1 HRP_IN3 (out), 2 Dout3 (in), 3 HRN_IN3 (out), 5 HRP_IN2 (out), 7 HRN_IN2 (in), 8 C2M (out), 9 HRP_IN1 (out), 10 DCLK (in), 11 HRN_IN1 (in), 12 MODE (in), 13 FSTRT (in), 14 RALRM (out), 15 RNAT (out), 17 Dout4 (in), 18 FA4 (out), 19 SL4 (out), 26 Dout2 (in), 29 SL2 (out), 33 RAIS1 < (out), 34 FA2 (out), 35 RASI2 < (out), 36 FA3 (out), 37 RAIS3 < (out), 38 SL3 (out), 39 RAIS4 < (out), 41 RMOTAIS < (out), 44 RLIS (out), 45 RLIS_RSI < (out), 46 RSI (in), 50 Dout1 (in), 51 LAS < (out), 52 FA1 (out), 53 HRP_01 (out), 54 HRN_01 (out), 55 SL1 (out), 56 HRP_02 (out), 58 HRN_02 (out), 59 PXORN_8 (in), 60 AIS8 > (in), 61 LAISCK (out), 62 CIN8 (in), 66 DR8 (in), 67 JR2 (out), 68 HRP_03 (out), 69 FD (out), 71 JR1 (out), 72 HRN_03 (out), 73 FRAMERST (out), 74 HRP_04 (out), 75 HRN_04 (out), 77 HRP_IN4 (out), 78 FL (out), 79 HRN_IN4 (out), 80 JR3 (out), 82 JR4 (out), 83 C16B2 (in)

## DIGIT
designator SW?
footprint FR01
pins: A0, A1, A2, A3, COM

## DIN_CON C/2AC
designator J?
footprint DIN32
footprint DIN32RA
pins: 1A, 1C, 2A, 2C, 3A, 3C, 4A, 4C, 5A, 5C, 6A, 6C, 7A, 7C, 8A, 8C, 9A, 9C, 10A, 10C, 11A, 11C, 12A, 12C, 13A, 13C, 14A, 14C, 15A, 15C, 16A, 16C

## DIODE
designator D?
footprint DIODE0.4
footprint DIODE0.3
footprint SMD-DIODE
pins: A, K

## DIODE DUAL A
designator D?
pins: 1 A1 (in), 2 A2 (in), 3 K (out)

## DIODE DUAL A-2
designator LED?
DUAL LED
pins: 1 A1 (in), 2 K (out), 3 A2 (in)
text: R

## DIODE DUAL K
designator D?
pins: 1 A1 (in), 2 A2 (in), 3 K (out)
text: R

## DIODE SENSETIVE GATE
designator *
pins: 1, 2, 3

## DIODE VARACTOR
designator V?
pins: 1 A, 2 K

## DIODE VARACTOR_1
designator V?
pins: 1 A, 2 K

## DIODE ZENER
designator DZ?
pins: A, K

## DIODE-DUAL
designator D?
footprint SMD-23ZENER
pins: 1, 2, 3

## DIODE-DUAL2
designator D?
footprint SOT143B (Footprint not found)
part A pins: 1, 4, 4
part B pins: 2, 3

## DIODE-SMD2
designator D?
footprint SMD-23ZENER
pins: A1, A2, K

## Dip-4
designator DIP-4
pins: 1, 2, 3, 4

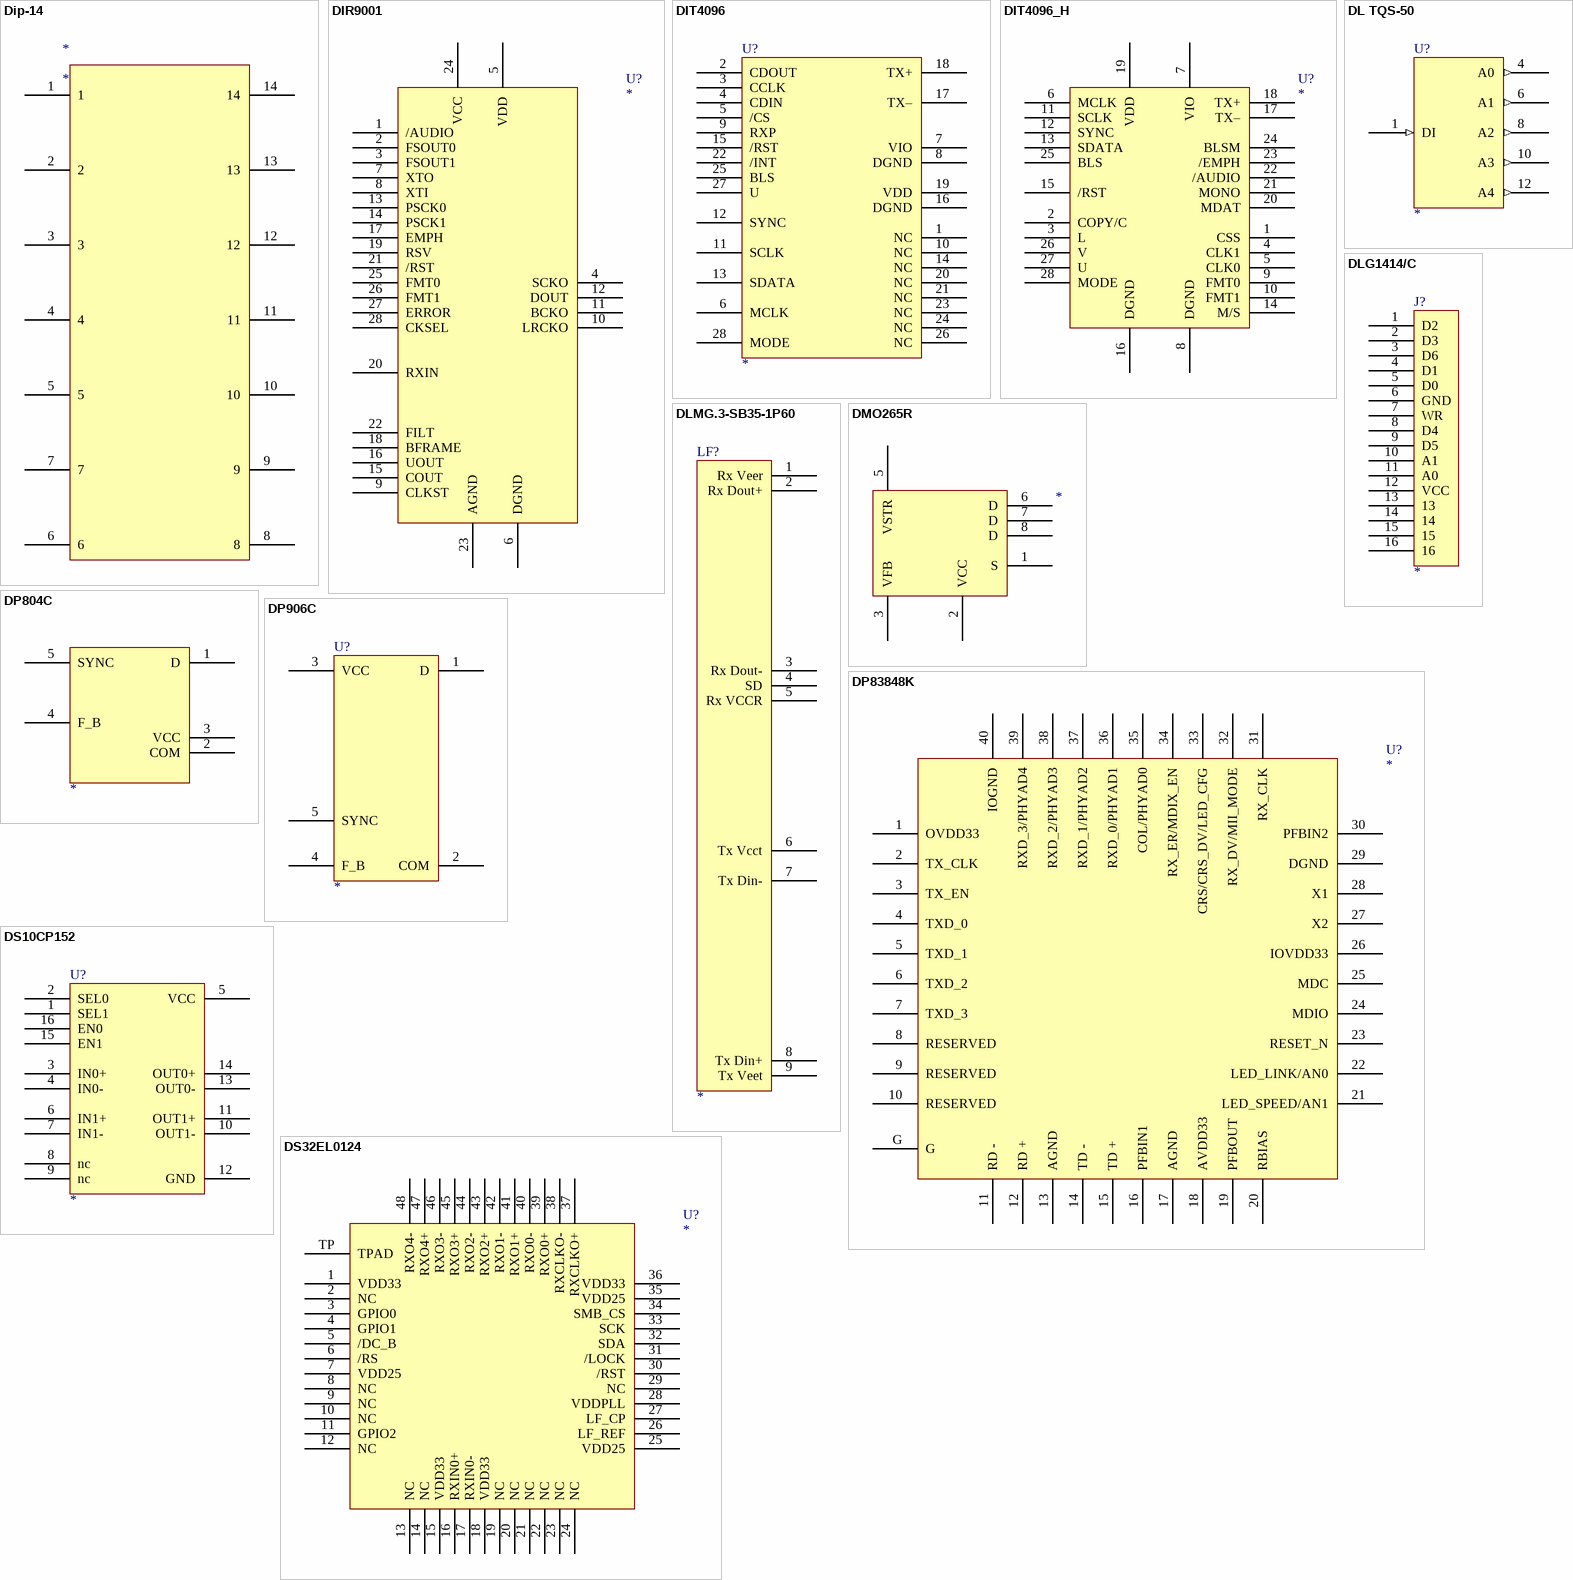
[diagram p22: symbols Dip-14 to DS32EL0124]

## Dip-14
designator *
pins: 1, 2, 3, 4, 5, 6, 7, 8, 9, 10, 11, 12, 13, 14

## DIR9001
designator U?
footprint SOP28
pins: 1 /AUDIO, 2 FSOUT0, 3 FSOUT1, 4 SCKO, 5 VDD, 6 DGND, 7 XTO, 8 XTI, 9 CLKST, 10 LRCKO, 11 BCKO, 12 DOUT, 13 PSCK0, 14 PSCK1, 15 COUT, 16 UOUT, 17 EMPH, 18 BFRAME, 19 RSV, 20 RXIN, 21 /RST, 22 FILT, 23 AGND, 24 VCC, 25 FMT0, 26 FMT1, 27 ERROR, 28 CKSEL

## DIT4096
designator U?
footprint SOP28
pins: 1 NC, 2 CDOUT, 3 CCLK, 4 CDIN, 5 /CS, 6 MCLK, 7 VIO, 8 DGND, 9 RXP, 10 NC, 11 SCLK, 12 SYNC, 13 SDATA, 14 NC, 15 /RST, 16 DGND, 17 TX–, 18 TX+, 19 VDD, 20 NC, 21 NC, 22 /INT, 23 NC, 24 NC, 25 BLS, 26 NC, 27 U, 28 MODE

## DIT4096_H
designator U?
footprint SOP28
pins: 1 CSS, 2 COPY/C, 3 L, 4 CLK1, 5 CLK0, 6 MCLK, 7 VIO, 8 DGND, 9 FMT0, 10 FMT1, 11 SCLK, 12 SYNC, 13 SDATA, 14 M/S, 15 /RST, 16 DGND, 17 TX–, 18 TX+, 19 VDD, 20 MDAT, 21 MONO, 22 /AUDIO, 23 /EMPH, 24 BLSM, 25 BLS, 26 V, 27 U, 28 MODE

## DL TQS-50
designator U?
pins: 1 DI (in), 4 A0 (out), 6 A1 (out), 7 GND (power) hidden to GND, 8 A2 (out), 10 A3 (out), 12 A4 (out), 14 VCC (power) hidden to VCC

## DLG1414/C
designator J?
pins: 1 D2, 2 D3, 3 D6, 4 D1, 5 D0, 6 GND, 7 WR, 8 D4, 9 D5, 10 A1, 11 A0, 12 VCC, 13, 14, 15, 16

## DLMG.3-SB35-1P60
designator LF?
footprint LTR01
pins: 1 Rx Veer, 2 Rx Dout+, 3 Rx Dout-, 4 SD, 5 Rx VCCR, 6 Tx Vcct, 7 Tx Din-, 8 Tx Din+, 9 Tx Veet

## DMO265R
designator ?
pins: 1 S, 2 VCC, 3 VFB, 5 VSTR, 6 D, 7 D, 8 D

## DP804C
designator ?
pins: 1 D, 2 COM, 3 VCC, 4 F_B, 5 SYNC

## DP906C
designator U?
pins: 1 D, 2 COM, 3 VCC, 4 F_B, 5 SYNC

## DP83848K
designator U?
footprint Q40
pins: 1 OVDD33, 2 TX_CLK, 3 TX_EN, 4 TXD_0, 5 TXD_1, 6 TXD_2, 7 TXD_3, 8 RESERVED, 9 RESERVED, 10 RESERVED, 11 RD -, 12 RD +, 13 AGND, 14 TD -, 15 TD +, 16 PFBIN1, 17 AGND, 18 AVDD33, 19 PFBOUT, 20 RBIAS, 21 LED_SPEED/AN1, 22 LED_LINK/AN0, 23 RESET_N, 24 MDIO, 25 MDC, 26 IOVDD33, 27 X2, 28 X1, 29 DGND, 30 PFBIN2, 31 RX_CLK, 32 RX_DV/MII_MODE, 33 CRS/CRS_DV/LED_CFG, 34 RX_ER/MDIX_EN, 35 COL/PHYAD0, 36 RXD_0/PHYAD1, 37 RXD_1/PHYAD2, 38 RXD_2/PHYAD3, 39 RXD_3/PHYAD4, 40 IOGND, G

## DS10CP152
designator U?
footprint SO-16
pins: 1 SEL1, 2 SEL0, 3 IN0+, 4 IN0-, 5 VCC, 6 IN1+, 7 IN1-, 8 nc, 9 nc, 10 OUT1-, 11 OUT1+, 12 GND, 13 OUT0-, 14 OUT0+, 15 EN1, 16 EN0

## DS32EL0124
designator U?
footprint LLP48
pins: 1 VDD33, 2 NC, 3 GPIO0, 4 GPIO1, 5 /DC_B, 6 /RS, 7 VDD25, 8 NC, 9 NC, 10 NC, 11 GPIO2, 12 NC, 13 NC, 14 NC, 15 VDD33, 16 RXIN0+, 17 RXIN0-, 18 VDD33, 19 NC, 20 NC, 21 NC, 22 NC, 23 NC, 24 NC, 25 VDD25, 26 LF_REF, 27 LF_CP, 28 VDDPLL, 29 NC, 30 /RST, 31 /LOCK, 32 SDA, 33 SCK, 34 SMB_CS, 35 VDD25, 36 VDD33, 37 RXCLKO+, 38 RXCLKO-, 39 RXO0+, 40 RXO0-, 41 RXO1+, 42 RXO1-, 43 RXO2+, 44 RXO2-, 45 RXO3+, 46 RXO3-, 47 RXO4+, 48 RXO4-, TP TPAD

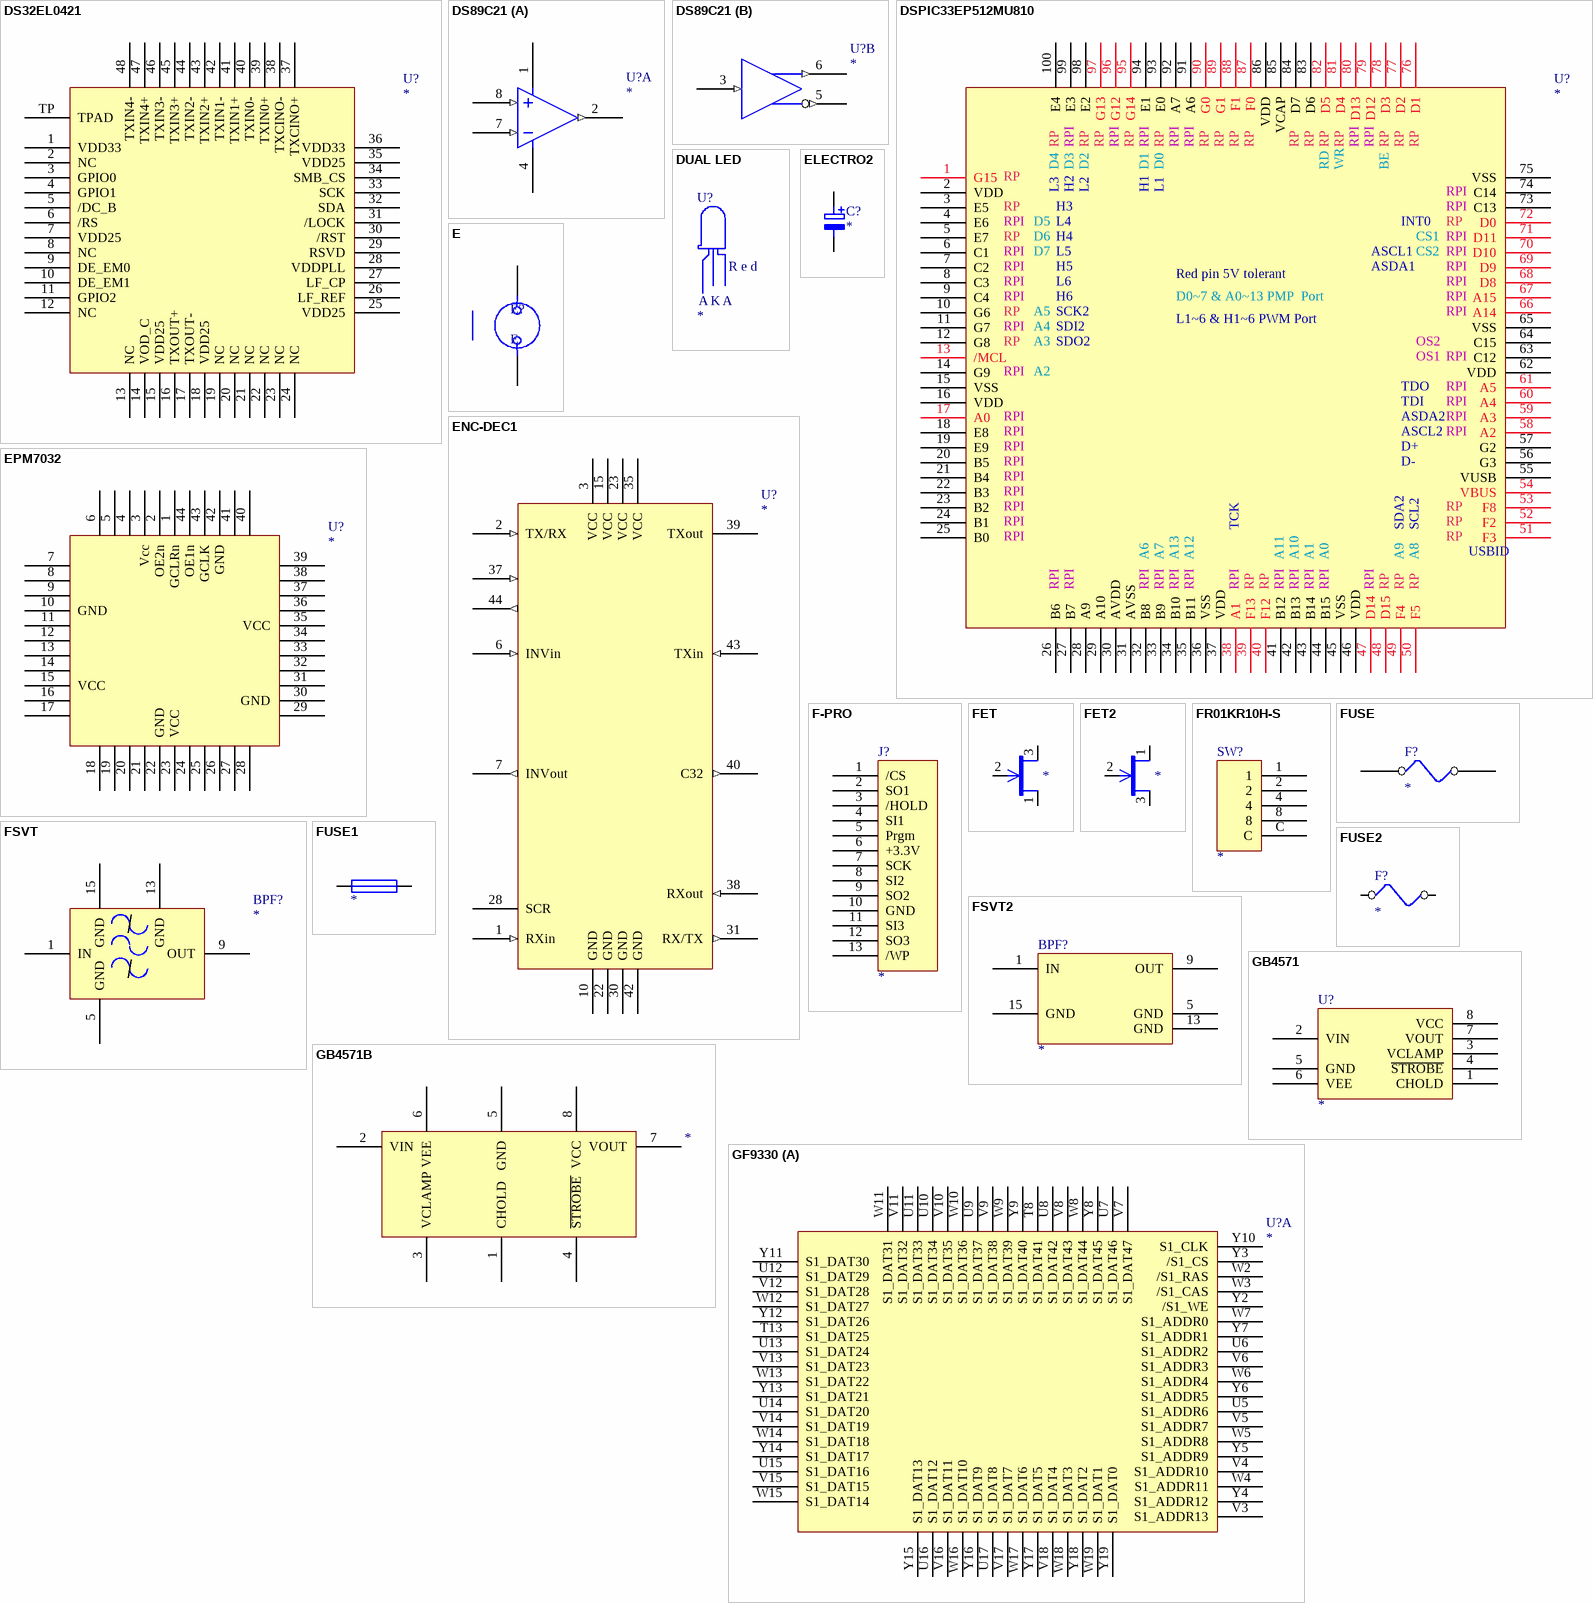
[diagram p23: symbols DS32EL0421 to GF9330]

## DS32EL0421
designator U?
footprint LLP48
pins: 1 VDD33, 2 NC, 3 GPIO0, 4 GPIO1, 5 /DC_B, 6 /RS, 7 VDD25, 8 NC, 9 DE_EM0, 10 DE_EM1, 11 GPIO2, 12 NC, 13 NC, 14 VOD_C, 15 VDD25, 16 TXOUT+, 17 TXOUT-, 18 VDD25, 19 NC, 20 NC, 21 NC, 22 NC, 23 NC, 24 NC, 25 VDD25, 26 LF_REF, 27 LF_CP, 28 VDDPLL, 29 RSVD, 30 /RST, 31 /LOCK, 32 SDA, 33 SCK, 34 SMB_CS, 35 VDD25, 36 VDD33, 37 TXCINO+, 38 TXCINO-, 39 TXIN0+, 40 TXIN0-, 41 TXIN1+, 42 TXIN1-, 43 TXIN2+, 44 TXIN2-, 45 TXIN3+, 46 TXIN3-, 47 TXIN4+, 48 TXIN4-, TP TPAD

## DS89C21
designator U?
footprint SO-8
part A pins: 1 V+, 2 D1 (out), 4 V-, 7 Q2 (in), 8 Q1 (in)
part B pins: 3 Q1 (in), 5 D1 (out), 6 D1 (out)

## DSPIC33EP512MU810
designator U?
footprint TQFP-100(FPGA)
pins: 1 G15, 2 VDD, 3 E5, 4 E6, 5 E7, 6 C1, 7 C2, 8 C3, 9 C4, 10 G6, 11 G7, 12 G8, 13 /MCL, 14 G9, 15 VSS, 16 VDD, 17 A0, 18 E8, 19 E9, 20 B5, 21 B4, 22 B3, 23 B2, 24 B1, 25 B0, 26 B6, 27 B7, 28 A9, 29 A10, 30 AVDD, 31 AVSS, 32 B8, 33 B9, 34 B10, 35 B11, 36 VSS, 37 VDD, 38 A1, 39 F13, 40 F12, 41 B12, 42 B13, 43 B14, 44 B15, 45 VSS, 46 VDD, 47 D14, 48 D15, 49 F4, 50 F5, 51 F3, 52 F2, 53 F8, 54 VBUS, 55 VUSB, 56 G3, 57 G2, 58 A2, 59 A3, 60 A4, 61 A5, 62 VDD, 63 C12, 64 C15, 65 VSS, 66 A14, 67 A15, 68 D8, 69 D9, 70 D10, 71 D11, 72 D0, 73 C13, 74 C14, 75 VSS, 76 D1, 77 D2, 78 D3, 79 D12, 80 D13, 81 D4, 82 D5, 83 D6, 84 D7, 85 VCAP, 86 VDD, 87 F0, 88 F1, 89 G1, 90 G0, 91 A6, 92 A7, 93 E0, 94 E1, 95 G14, 96 G12, 97 G13, 98 E2, 99 E3, 100 E4
text: RP; RPI; RD; WR; BE; L3; H2; L2; H1; L1; H3; L4; INT0; H4; CS1; L5; ASCL1; CS2; H5; ASDA1; Red pin 5V tolerant; L6; H6; D0~7 & A0~13 PMP  Port; SCK2; L1~6 & H1~6 PWM Port; SDI2; SDO2; OS2; OS1; TDO; TDI; ASDA2; ASCL2; D+; D-; TCK; SDA2; SCL2; A13; A12; A11; A8; USBID

## DUAL LED
designator U?
text: R e d; A; K

## E
designator E?
pins: 1, 2

## ELECTRO2
designator C?
footprint RB.1/.15A
footprint RB.1/.2
footprint RB.1/.25
footprint RB.1/.3
pins: 1, 2

## ENC-DEC1
designator U?
pins: 1 RXin (in), 2 TX/RX (in), 3 VCC, 6 INVin (in), 7 INVout (out), 10 GND, 15 VCC, 22 GND, 23 VCC, 28 SCR, 30 GND, 31 RX/TX (out), 35 VCC, 37 (in), 38 RXout (in), 39 TXout, 40 C32 (out), 42 GND, 43 TXin (in), 44 (out)

## EPM7032
designator U?
footprint PGA44X8
pins: 1 GCLRn, 2 OE2n, 3 Vcc, 4, 5, 6, 7, 8, 9, 10 GND, 11, 12, 13, 14, 15 VCC, 16, 17, 18, 19, 20, 21, 22 GND, 23 VCC, 24, 25, 26, 27, 28, 29, 30 GND, 31, 32, 33, 34, 35 VCC, 36, 37, 38, 39, 40, 41, 42 GND, 43 GCLK, 44 OE1n

## F-PRO
designator J?
footprint CON13/CON
pins: 1 /CS, 2 SO1, 3 /HOLD, 4 SI1, 5 Prgm, 6 +3.3V, 7 SCK, 8 SI2, 9 SO2, 10 GND, 11 SI3, 12 SO3, 13 /WP

## FET
designator ?
pins: 1, 2, 3

## FET2
designator ?
pins: 1, 2, 3

## FR01KR10H-S
designator SW?
pins: 1, 2, 4, 8, C

## FSVT
designator BPF?
footprint BPF1
pins: 1 IN, 5 GND, 9 OUT, 13 GND, 15 GND

## FSVT2
designator BPF?
footprint BPF2
footprint BPF1
pins: 1 IN, 5 GND, 9 OUT, 13 GND, 15 GND

## FUSE
designator F?
footprint FUSE4
footprint FUSE3
pins: 1, 2

## FUSE1
designator ?
pins: 1, 2

## FUSE2
designator F?
footprint FUSE3
pins: 1, 2

## GB4571
designator U?
footprint SO-8
pins: 1 CHOLD, 2 VIN, 3 VCLAMP, 4 ~{STROBE}, 5 GND, 6 VEE, 7 VOUT, 8 VCC

## GB4571B
designator ?
pins: 1 CHOLD, 2 VIN, 3 VCLAMP, 4 ~{STROBE}, 5 GND, 6 VEE, 7 VOUT, 8 VCC

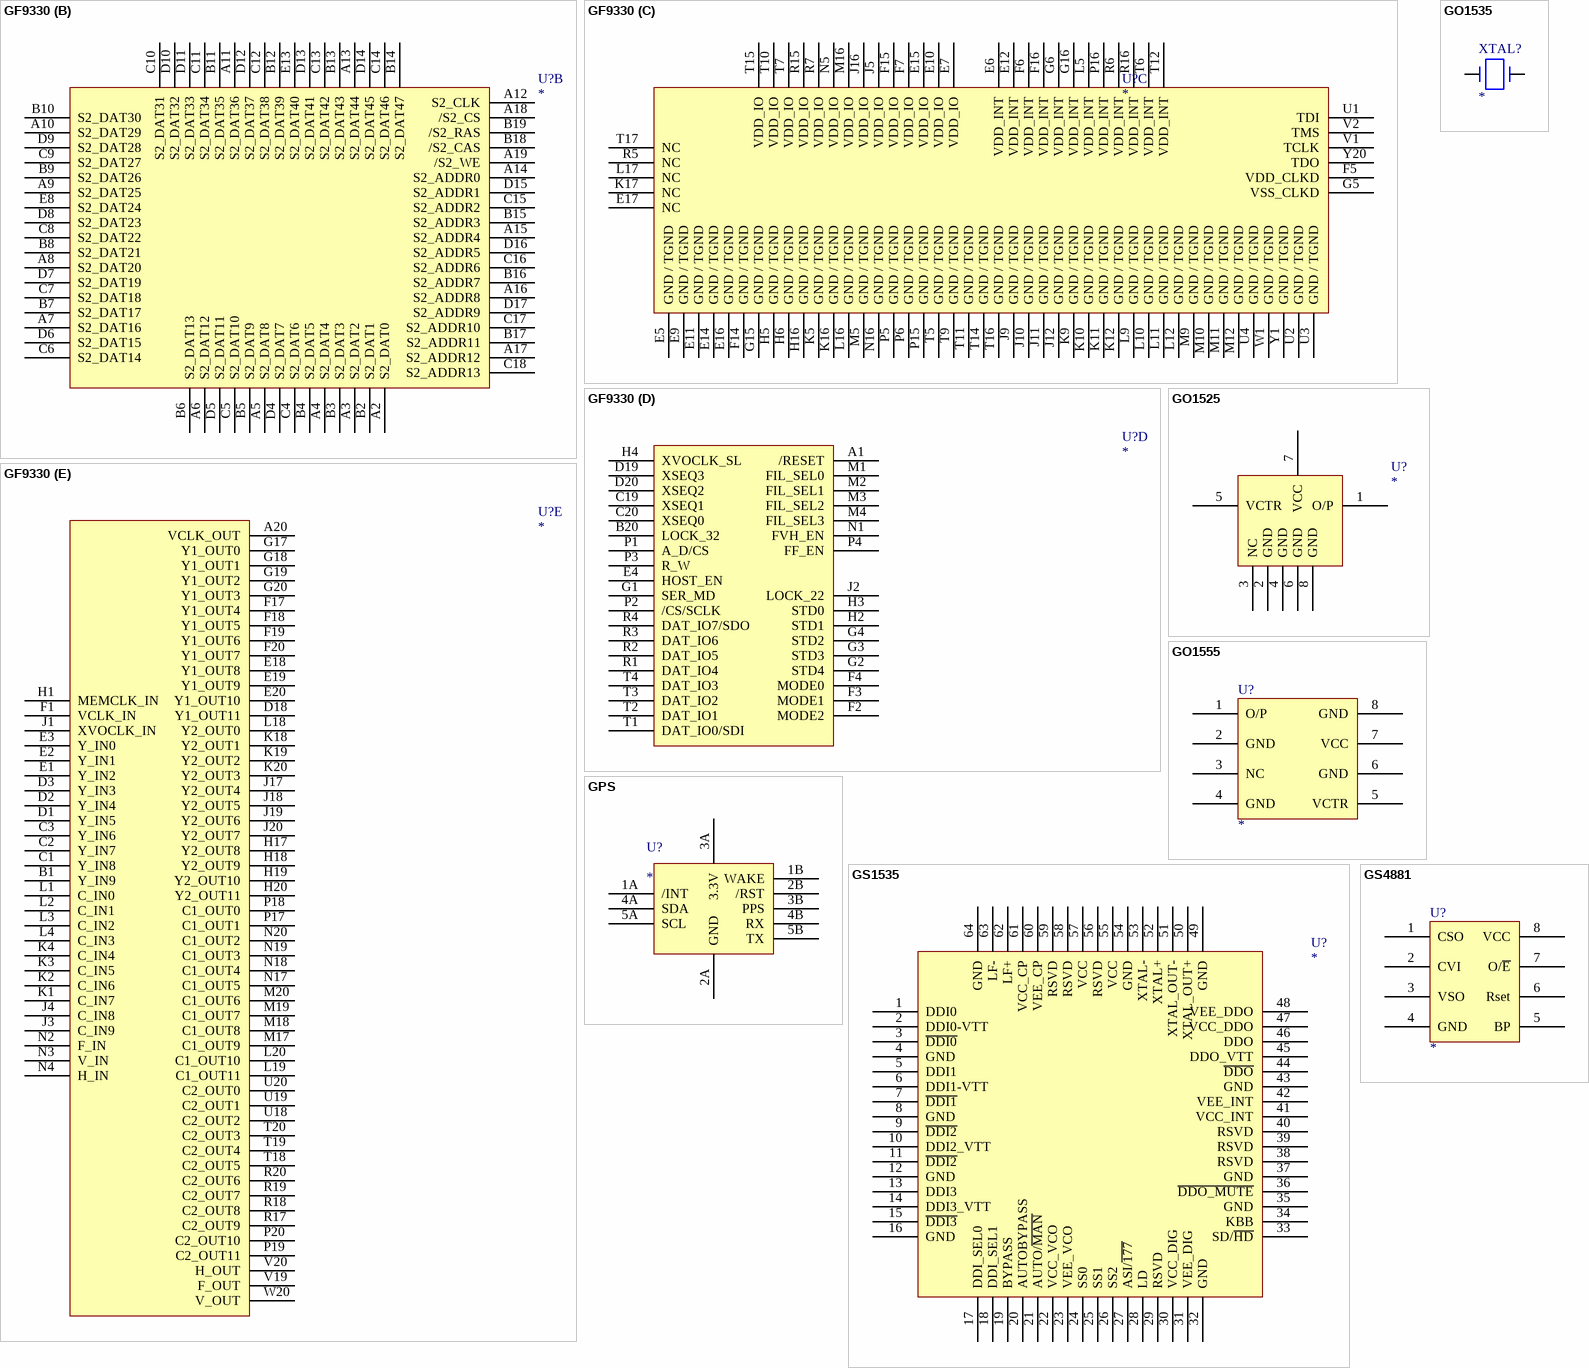
[diagram p24: symbols GF9330 to GS4881]

## GF9330
designator U?
footprint BGA320X20
part A pins: T8 S1_DAT41, T13 S1_DAT25, U5 S1_ADDR6, U6 S1_ADDR2, U7 S1_DAT46, U8 S1_DAT42, U9 S1_DAT37, U10 S1_DAT34, U11 S1_DAT33, U12 S1_DAT29, U13 S1_DAT24, U14 S1_DAT20, U15 S1_DAT16, U16 S1_DAT12, U17 S1_DAT8, V3 S1_ADDR13, V4 S1_ADDR10, V5 S1_ADDR7, V6 S1_ADDR3, V7 S1_DAT47, V8 S1_DAT43, V9 S1_DAT38, V10 S1_DAT35, V11 S1_DAT32, V12 S1_DAT28, V13 S1_DAT23, V14 S1_DAT19, V15 S1_DAT15, V16 S1_DAT11, V17 S1_DAT7, V18 S1_DAT4, W2 /S1_RAS, W3 /S1_CAS, W4 S1_ADDR11, W5 S1_ADDR8, W6 S1_ADDR4, W7 S1_ADDR0, W8 S1_DAT44, W9 S1_DAT39, W10 S1_DAT36, W11 S1_DAT31, W12 S1_DAT27, W13 S1_DAT22, W14 S1_DAT18, W15 S1_DAT14, W16 S1_DAT10, W17 S1_DAT6, W18 S1_DAT3, W19 S1_DAT1, Y2 /S1_WE, Y3 /S1_CS, Y4 S1_ADDR12, Y5 S1_ADDR9, Y6 S1_ADDR5, Y7 S1_ADDR1, Y8 S1_DAT45, Y9 S1_DAT40, Y10 S1_CLK, Y11 S1_DAT30, Y12 S1_DAT26, Y13 S1_DAT21, Y14 S1_DAT17, Y15 S1_DAT13, Y16 S1_DAT9, Y17 S1_DAT5, Y18 S1_DAT2, Y19 S1_DAT0
part B pins: A2 S2_DAT0, A3 S2_DAT2, A4 S2_DAT4, A5 S2_DAT8, A6 S2_DAT12, A7 S2_DAT16, A8 S2_DAT20, A9 S2_DAT25, A10 S2_DAT29, A11 S2_DAT36, A12 S2_CLK, A13 S2_DAT44, A14 S2_ADDR0, A15 S2_ADDR4, A16 S2_ADDR8, A17 S2_ADDR12, A18 /S2_CS, A19 /S2_WE, B2 S2_DAT1, B3 S2_DAT3, B4 S2_DAT5, B5 S2_DAT9, B6 S2_DAT13, B7 S2_DAT17, B8 S2_DAT21, B9 S2_DAT26, B10 S2_DAT30, B11 S2_DAT35, B12 S2_DAT39, B13 S2_DAT43, B14 S2_DAT47, B15 S2_ADDR3, B16 S2_ADDR7, B17 S2_ADDR11, B18 /S2_CAS, B19 /S2_RAS, C4 S2_DAT6, C5 S2_DAT10, C6 S2_DAT14, C7 S2_DAT18, C8 S2_DAT22, C9 S2_DAT27, C10 S2_DAT31, C11 S2_DAT34, C12 S2_DAT38, C13 S2_DAT42, C14 S2_DAT46, C15 S2_ADDR2, C16 S2_ADDR6, C17 S2_ADDR10, C18 S2_ADDR13, D4 S2_DAT7, D5 S2_DAT11, D6 S2_DAT15, D7 S2_DAT19, D8 S2_DAT23, D9 S2_DAT28, D10 S2_DAT32, D11 S2_DAT33, D12 S2_DAT37, D13 S2_DAT41, D14 S2_DAT45, D15 S2_ADDR1, D16 S2_ADDR5, D17 S2_ADDR9, E8 S2_DAT24, E13 S2_DAT40
part C pins: E5 GND / TGND, E6 VDD_INT, E7 VDD_IO, E9 GND / TGND, E10 VDD_IO, E11 GND / TGND, E12 VDD_INT, E14 GND / TGND, E15 VDD_IO, E16 GND / TGND, E17 NC, F5 VDD_CLKD, F6 VDD_INT, F7 VDD_IO, F14 GND / TGND, F15 VDD_IO, F16 VDD_INT, G5 VSS_CLKD, G6 VDD_INT, G15 GND / TGND, G16 VDD_INT, H5 GND / TGND, H6 GND / TGND, H16 GND / TGND, J5 VDD_IO, J9 GND / TGND, J10 GND / TGND, J11 GND / TGND, J12 GND / TGND, J16 VDD_IO, K5 GND / TGND, K9 GND / TGND, K10 GND / TGND, K11 GND / TGND, K12 GND / TGND, K16 GND / TGND, K17 NC, L5 VDD_INT, L9 GND / TGND, L10 GND / TGND, L11 GND / TGND, L12 GND / TGND, L16 GND / TGND, L17 NC, M5 GND / TGND, M9 GND / TGND, M10 GND / TGND, M11 GND / TGND, M12 GND / TGND, M16 VDD_IO, N5 VDD_IO, N16 GND / TGND, P5 GND / TGND, P6 GND / TGND, P15 GND / TGND, P16 VDD_INT, R5 NC, R6 VDD_INT, R7 VDD_IO, R15 VDD_IO, R16 VDD_INT, T5 GND / TGND, T6 VDD_INT, T7 VDD_IO, T9 GND / TGND, T10 VDD_IO, T11 GND / TGND, T12 VDD_INT, T14 GND / TGND, T15 VDD_IO, T16 GND / TGND, T17 NC, U1 TDI, U2 GND / TGND, U3 GND / TGND, U4 GND / TGND, V1 TCLK, V2 TMS, W1 GND / TGND, Y1 GND / TGND, Y20 TDO
part D pins: A1 /RESET, B20 LOCK_32, C19 XSEQ1, C20 XSEQ0, D19 XSEQ3, D20 XSEQ2, E4 HOST_EN, F2 MODE2, F3 MODE1, F4 MODE0, G1 SER_MD, G2 STD4, G3 STD3, G4 STD2, H2 STD1, H3 STD0, H4 XVOCLK_SL, J2 LOCK_22, M1 FIL_SEL0, M2 FIL_SEL1, M3 FIL_SEL2, M4 FIL_SEL3, N1 FVH_EN, P1 A_D/CS, P2 /CS/SCLK, P3 R_W, P4 FF_EN, R1 DAT_IO4, R2 DAT_IO5, R3 DAT_IO6, R4 DAT_IO7/SDO, T1 DAT_IO0/SDI, T2 DAT_IO1, T3 DAT_IO2, T4 DAT_IO3
part E pins: A20 VCLK_OUT, B1 Y_IN9, C1 Y_IN8, C2 Y_IN7, C3 Y_IN6, D1 Y_IN5, D2 Y_IN4, D3 Y_IN3, D18 Y1_OUT11, E1 Y_IN2, E2 Y_IN1, E3 Y_IN0, E18 Y1_OUT8, E19 Y1_OUT9, E20 Y1_OUT10, F1 VCLK_IN, F17 Y1_OUT4, F18 Y1_OUT5, F19 Y1_OUT6, F20 Y1_OUT7, G17 Y1_OUT0, G18 Y1_OUT1, G19 Y1_OUT2, G20 Y1_OUT3, H1 MEMCLK_IN, H17 Y2_OUT8, H18 Y2_OUT9, H19 Y2_OUT10, H20 Y2_OUT11, J1 XVOCLK_IN, J3 C_IN9, J4 C_IN8, J17 Y2_OUT4, J18 Y2_OUT5, J19 Y2_OUT6, J20 Y2_OUT7, K1 C_IN7, K2 C_IN6, K3 C_IN5, K4 C_IN4, K18 Y2_OUT1, K19 Y2_OUT2, K20 Y2_OUT3, L1 C_IN0, L2 C_IN1, L3 C_IN2, L4 C_IN3, L18 Y2_OUT0, L19 C1_OUT11, L20 C1_OUT10, M17 C1_OUT9, M18 C1_OUT8, M19 C1_OUT7, M20 C1_OUT6, N2 F_IN, N3 V_IN, N4 H_IN, N17 C1_OUT5, N18 C1_OUT4, N19 C1_OUT3, N20 C1_OUT2, P17 C1_OUT1, P18 C1_OUT0, P19 C2_OUT11, P20 C2_OUT10, R17 C2_OUT9, R18 C2_OUT8, R19 C2_OUT7, R20 C2_OUT6, T18 C2_OUT5, T19 C2_OUT4, T20 C2_OUT3, U18 C2_OUT2, U19 C2_OUT1, U20 C2_OUT0, V19 F_OUT, V20 H_OUT, W20 V_OUT

## GO1525
designator U?
footprint TOR-8
pins: 1 O/P, 2 GND, 3 NC, 4 GND, 5 VCTR, 6 GND, 7 VCC, 8 GND

## GO1535
designator XTAL?
footprint GO4
pins: 1, 3

## GO1555
designator U?
footprint PSML8
pins: 1 O/P, 2 GND, 3 NC, 4 GND, 5 VCTR, 6 GND, 7 VCC, 8 GND

## GPS
designator U?
footprint GPS-QWIIC
pins: 1A /INT, 1B WAKE, 2A GND, 2B /RST, 3A 3.3V, 3B PPS, 4A SDA, 4B RX, 5A SCL, 5B TX

## GS1535
designator U?
footprint ST-64B
pins: 1 DDI0, 2 DDI0-VTT, 3 ~{DDI0}, 4 GND, 5 DDI1, 6 DDI1-VTT, 7 ~{DDI1}, 8 GND, 9 ~{DDI2}, 10 DDI2_VTT, 11 ~{DDI2}, 12 GND, 13 DDI3, 14 DDI3_VTT, 15 ~{DDI3}, 16 GND, 17 DDI_SEL0, 18 DDI_SEL1, 19 BYPASS, 20 AUTOBYPASS, 21 AUTO/~{MAN}, 22 VCC_VCO, 23 VEE_VCO, 24 SS0, 25 SS1, 26 SS2, 27 ASI/~{177}, 28 LD, 29 RSVD, 30 VCC_DIG, 31 VEE_DIG, 32 GND, 33 SD/~{HD}, 34 KBB, 35 GND, 36 ~{DDO_MUTE}, 37 GND, 38 RSVD, 39 RSVD, 40 RSVD, 41 VCC_INT, 42 VEE_INT, 43 GND, 44 ~{DDO}, 45 DDO_VTT, 46 DDO, 47 VCC_DDO, 48 VEE_DDO, 49 GND, 50 XTAL_OUT+, 51 XTAL_OUT-, 52 XTAL+, 53 XTAL-, 54 GND, 55 VCC, 56 RSVD, 57 VCC, 58 RSVD, 59 RSVD, 60 VEE_CP, 61 VCC_CP, 62 LF+, 63 LF-, 64 GND

## GS4881
designator U?
footprint DIP8
pins: 1 CSO, 2 CVI, 3 VSO, 4 GND, 5 BP, 6 Rset, 7 O/~{E}, 8 VCC

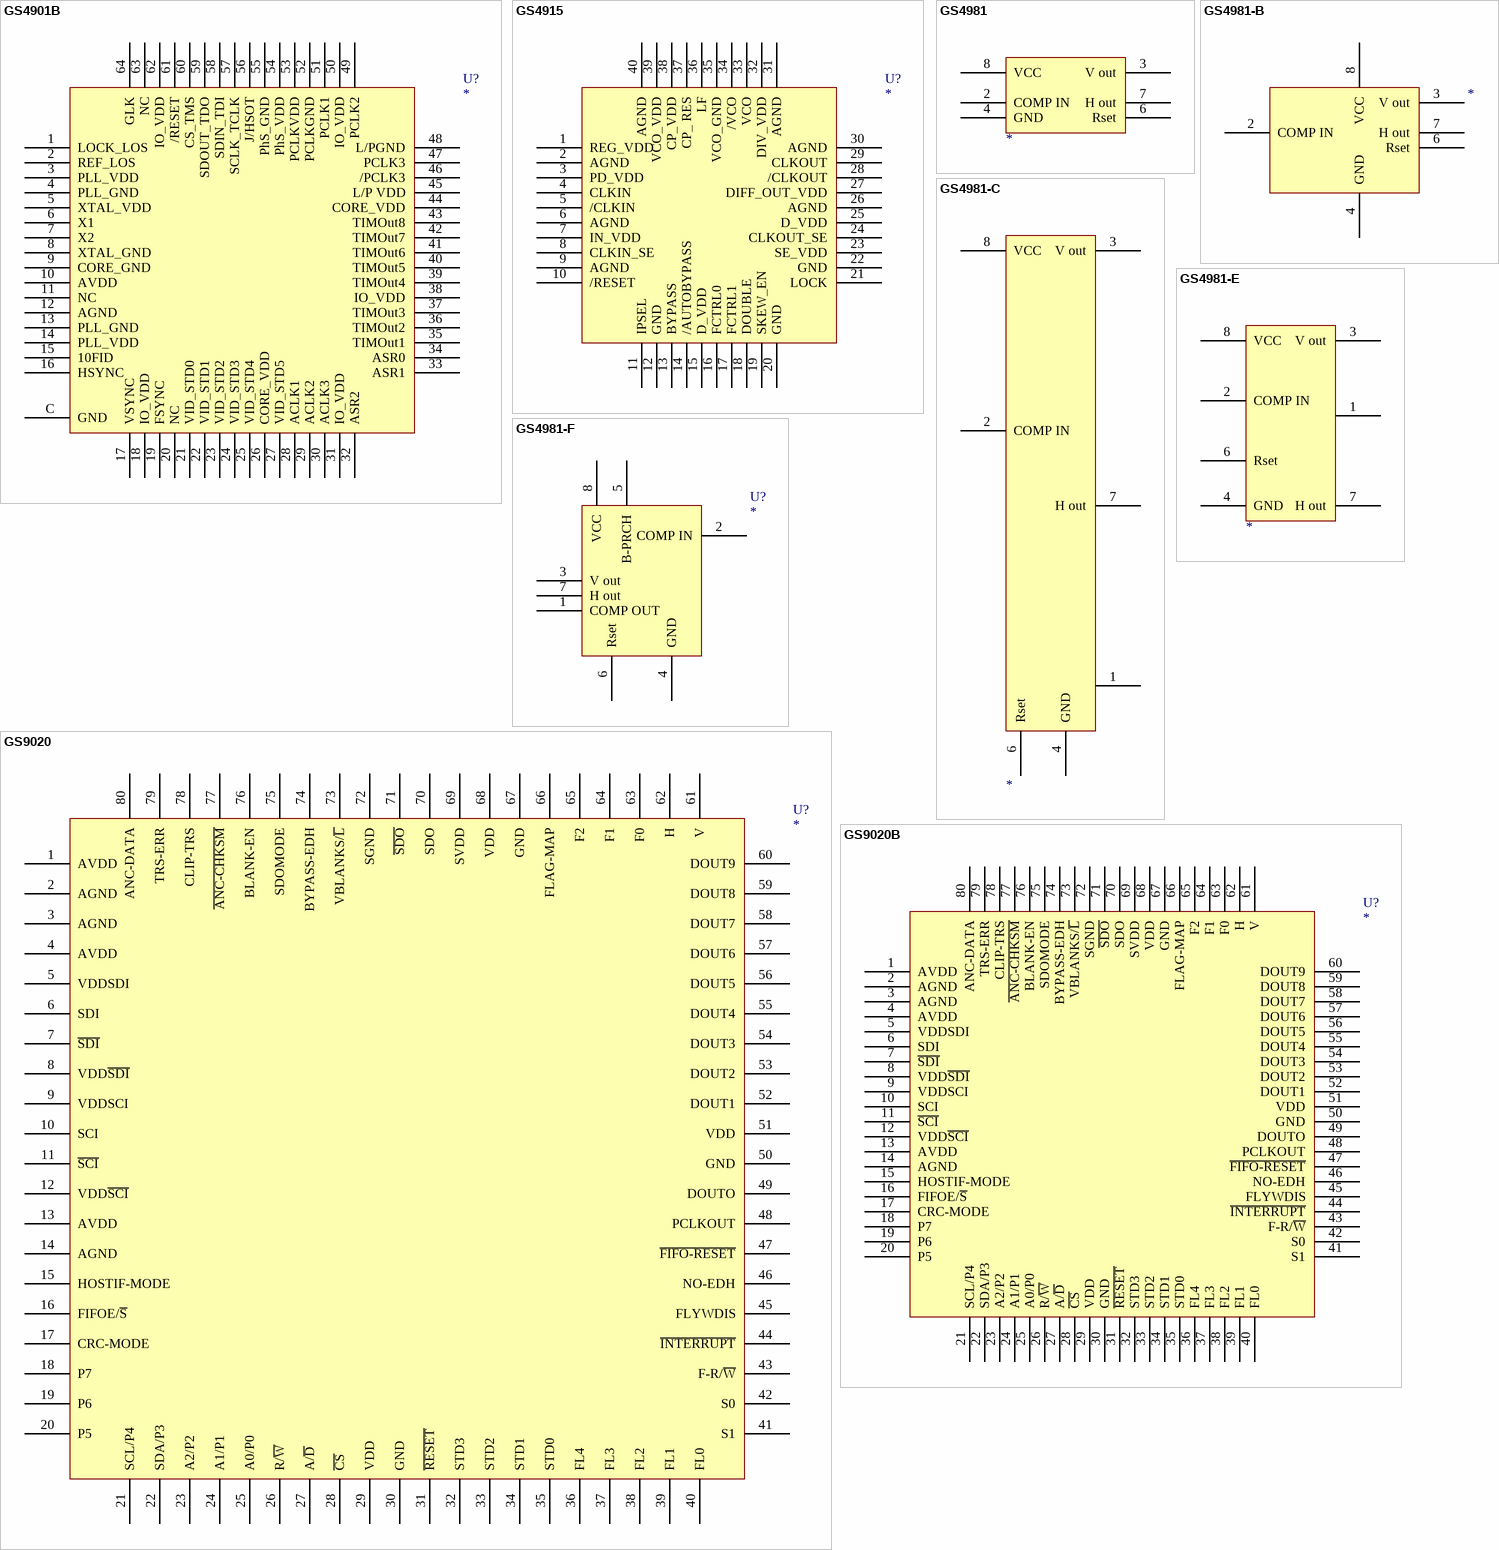
[diagram p25: symbols GS4901B to GS9020B]

## GS4901B
designator U?
footprint QFN64
pins: 1 LOCK_LOS, 2 REF_LOS, 3 PLL_VDD, 4 PLL_GND, 5 XTAL_VDD, 6 X1, 7 X2, 8 XTAL_GND, 9 CORE_GND, 10 AVDD, 11 NC, 12 AGND, 13 PLL_GND, 14 PLL_VDD, 15 10FID, 16 HSYNC, 17 VSYNC, 18 IO_VDD, 19 FSYNC, 20 NC, 21 VID_STD0, 22 VID_STD1, 23 VID_STD2, 24 VID_STD3, 25 VID_STD4, 26 CORE_VDD, 27 VID_STD5, 28 ACLK1, 29 ACLK2, 30 ACLK3, 31 IO_VDD, 32 ASR2, 33 ASR1, 34 ASR0, 35 TIMOut1, 36 TIMOut2, 37 TIMOut3, 38 IO_VDD, 39 TIMOut4, 40 TIMOut5, 41 TIMOut6, 42 TIMOut7, 43 TIMOut8, 44 CORE_VDD, 45 L/P VDD, 46 /PCLK3, 47 PCLK3, 48 L/PGND, 49 PCLK2, 50 IO_VDD, 51 PCLK1, 52 PCLKGND, 53 PCLKVDD, 54 PhS_VDD, 55 PhS_GND, 56 J/HSOT, 57 SCLK_TCLK, 58 SDIN_TDI, 59 SDOUT_TDO, 60 CS_TMS, 61 /RESET, 62 IO_VDD, 63 NC, 64 GLK, C GND

## GS4915
designator U?
footprint QFN40
pins: 1 REG_VDD, 2 AGND, 3 PD_VDD, 4 CLKIN, 5 /CLKIN, 6 AGND, 7 IN_VDD, 8 CLKIN_SE, 9 AGND, 10 /RESET, 11 IPSEL, 12 GND, 13 BYPASS, 14 /AUTOBYPASS, 15 D_VDD, 16 FCTRL0, 17 FCTRL1, 18 DOUBLE, 19 SKEW_EN, 20 GND, 21 LOCK, 22 GND, 23 SE_VDD, 24 CLKOUT_SE, 25 D_VDD, 26 AGND, 27 DIFF_OUT_VDD, 28 /CLKOUT, 29 CLKOUT, 30 AGND, 31 AGND, 32 DIV_VDD, 33 VCO, 34 /VCO, 35 VCO_GND, 36 LF, 37 CP_ RES, 38 CP_VDD, 39 VCO_VDD, 40 AGND

## GS4981
designator ?
pins: 2 COMP IN, 3 V out, 4 GND, 6 Rset, 7 H out, 8 VCC

## GS4981-B
designator ?
pins: 2 COMP IN, 3 V out, 4 GND, 6 Rset, 7 H out, 8 VCC

## GS4981-C
designator ?
pins: 1, 2 COMP IN, 3 V out, 4 GND, 6 Rset, 7 H out, 8 VCC

## GS4981-E
designator ?
pins: 1, 2 COMP IN, 3 V out, 4 GND, 6 Rset, 7 H out, 8 VCC

## GS4981-F
designator U?
pins: 1 COMP OUT, 2 COMP IN, 3 V out, 4 GND, 5 B-PRCH, 6 Rset, 7 H out, 8 VCC

## GS9020
designator U?
footprint TQFP80-A
pins: 1 AVDD (power), 2 AGND (power), 3 AGND (power), 4 AVDD (power), 5 VDDSDI, 6 SDI, 7 ~{SDI}, 8 VDD~{SDI}, 9 VDDSCI, 10 SCI, 11 ~{SCI}, 12 VDD~{SCI}, 13 AVDD (power), 14 AGND (power), 15 HOSTIF-MODE, 16 FIFOE/~{S}, 17 CRC-MODE, 18 P7, 19 P6, 20 P5, 21 SCL/P4, 22 SDA/P3, 23 A2/P2, 24 A1/P1, 25 A0/P0, 26 R/~{W}, 27 A/~{D}, 28 ~{CS}, 29 VDD (power), 30 GND (power), 31 ~{RESET}, 32 STD3, 33 STD2, 34 STD1, 35 STD0, 36 FL4, 37 FL3, 38 FL2, 39 FL1, 40 FL0, 41 S1, 42 S0, 43 F-R/~{W}, 44 ~{INTERRUPT}, 45 FLYWDIS, 46 NO-EDH, 47 ~{FIFO-RESET}, 48 PCLKOUT, 49 DOUTO, 50 GND (power), 51 VDD (power), 52 DOUT1, 53 DOUT2, 54 DOUT3, 55 DOUT4, 56 DOUT5, 57 DOUT6, 58 DOUT7, 59 DOUT8, 60 DOUT9, 61 V, 62 H, 63 F0, 64 F1, 65 F2, 66 FLAG-MAP, 67 GND (power), 68 VDD (power), 69 SVDD, 70 SDO, 71 ~{SDO}, 72 SGND, 73 VBLANKS/~{L}, 74 BYPASS-EDH, 75 SDOMODE, 76 BLANK-EN, 77 ~{ANC-CHKSM}, 78 CLIP-TRS, 79 TRS-ERR, 80 ANC-DATA

## GS9020B
designator U?
footprint TQFP80-A
pins: 1 AVDD (power), 2 AGND (power), 3 AGND (power), 4 AVDD (power), 5 VDDSDI, 6 SDI, 7 ~{SDI}, 8 VDD~{SDI}, 9 VDDSCI, 10 SCI, 11 ~{SCI}, 12 VDD~{SCI}, 13 AVDD (power), 14 AGND (power), 15 HOSTIF-MODE, 16 FIFOE/~{S}, 17 CRC-MODE, 18 P7, 19 P6, 20 P5, 21 SCL/P4, 22 SDA/P3, 23 A2/P2, 24 A1/P1, 25 A0/P0, 26 R/~{W}, 27 A/~{D}, 28 ~{CS}, 29 VDD (power), 30 GND (power), 31 ~{RESET}, 32 STD3, 33 STD2, 34 STD1, 35 STD0, 36 FL4, 37 FL3, 38 FL2, 39 FL1, 40 FL0, 41 S1, 42 S0, 43 F-R/~{W}, 44 ~{INTERRUPT}, 45 FLYWDIS, 46 NO-EDH, 47 ~{FIFO-RESET}, 48 PCLKOUT, 49 DOUTO, 50 GND (power), 51 VDD (power), 52 DOUT1, 53 DOUT2, 54 DOUT3, 55 DOUT4, 56 DOUT5, 57 DOUT6, 58 DOUT7, 59 DOUT8, 60 DOUT9, 61 V, 62 H, 63 F0, 64 F1, 65 F2, 66 FLAG-MAP, 67 GND (power), 68 VDD (power), 69 SVDD, 70 SDO, 71 ~{SDO}, 72 SGND, 73 VBLANKS/~{L}, 74 BYPASS-EDH, 75 SDOMODE, 76 BLANK-EN, 77 ~{ANC-CHKSM}, 78 CLIP-TRS, 79 TRS-ERR, 80 ANC-DATA

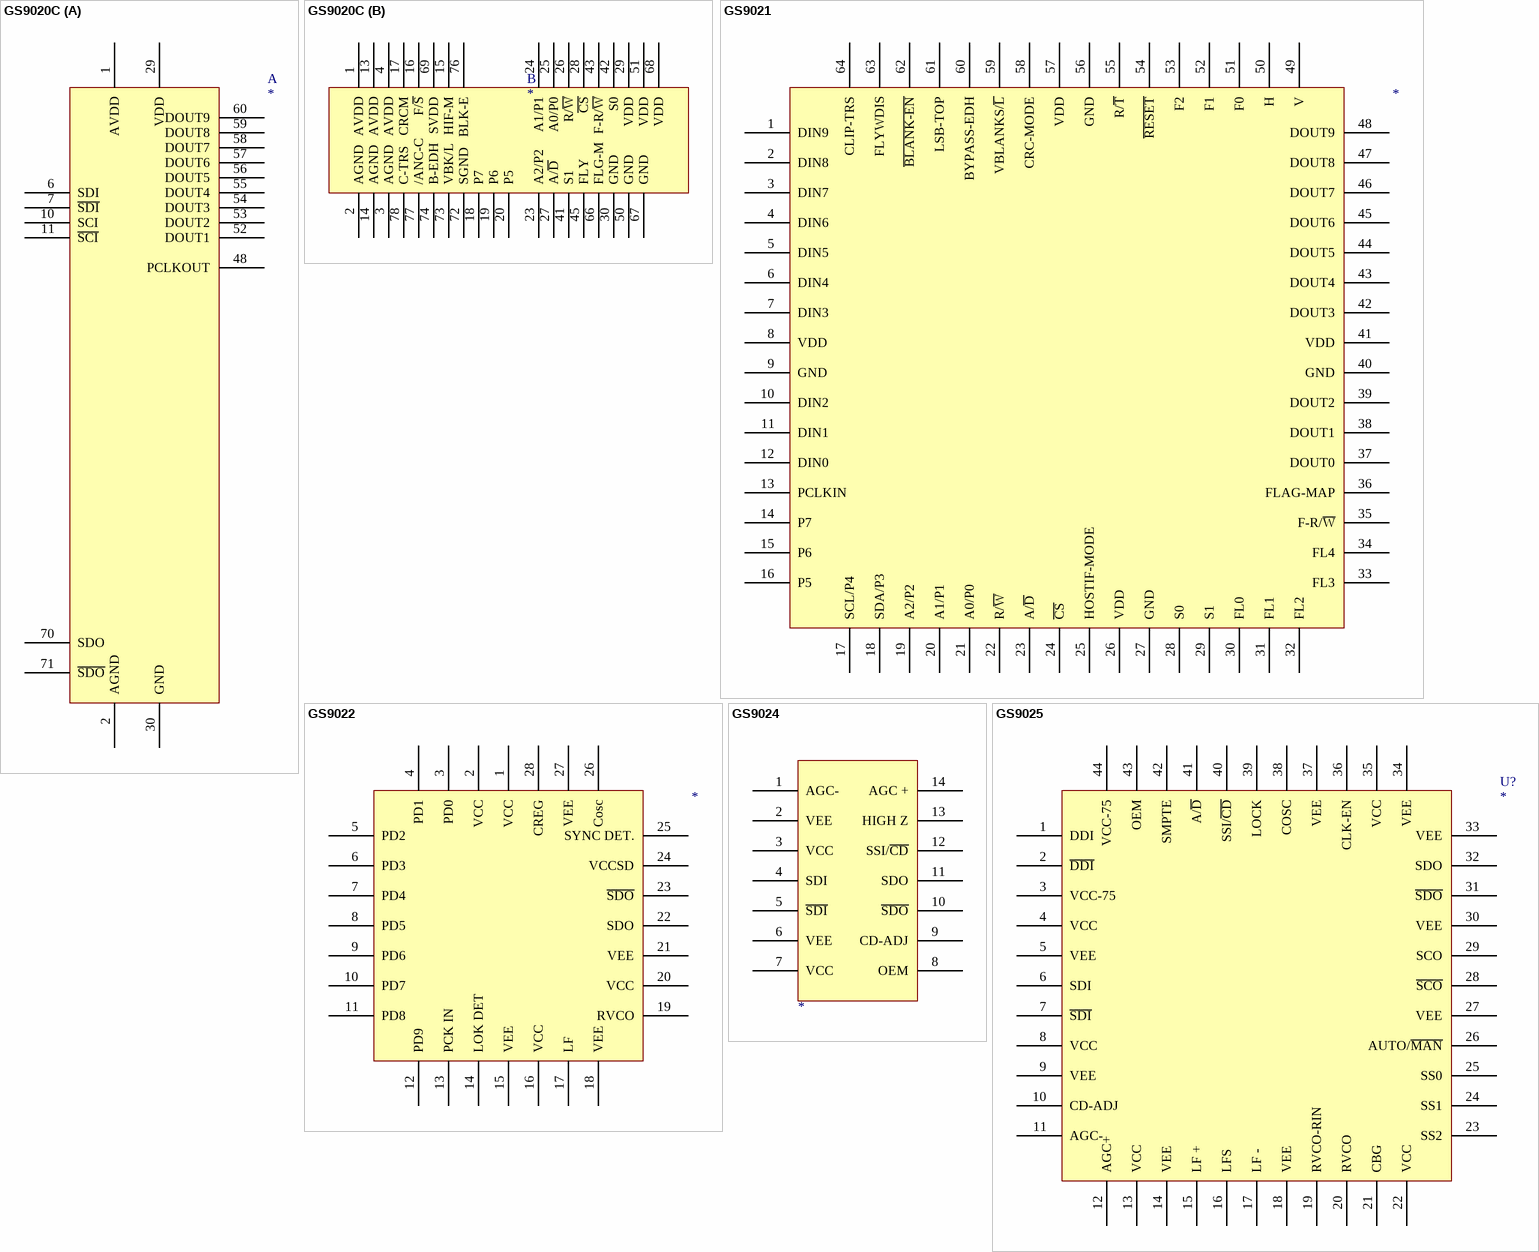
[diagram p26: symbols GS9020C to GS9025]

## GS9020C
designator ?
part A pins: 1 AVDD (power), 2 AGND (power), 6 SDI, 7 ~{SDI}, 10 SCI, 11 ~{SCI}, 29 VDD (power), 30 GND (power), 48 PCLKOUT, 52 DOUT1, 53 DOUT2, 54 DOUT3, 55 DOUT4, 56 DOUT5, 57 DOUT6, 58 DOUT7, 59 DOUT8, 60 DOUT9, 70 SDO, 71 ~{SDO}
part B pins: 1 AVDD (power), 2 AGND (power), 3 AGND (power), 4 AVDD (power), 13 AVDD (power), 14 AGND (power), 15 HIF-M, 16 F/~{S}, 17 CRCM, 18 P7, 19 P6, 20 P5, 23 A2/P2, 24 A1/P1, 25 A0/P0, 26 R/~{W}, 27 A/~{D}, 28 ~{CS}, 29 VDD (power), 30 GND (power), 41 S1, 42 S0, 43 F-R/~{W}, 45 FLY, 50 GND (power), 51 VDD (power), 66 FLG-M, 67 GND (power), 68 VDD (power), 69 SVDD, 72 SGND, 73 VBK/L, 74 B-EDH, 76 BLK-E, 77 /ANC-C, 78 C-TRS

## GS9021
designator ?
U?
footprint LQFP64
pins: 1 DIN9, 2 DIN8, 3 DIN7, 4 DIN6, 5 DIN5, 6 DIN4, 7 DIN3, 8 VDD (power), 9 GND (power), 10 DIN2, 11 DIN1, 12 DIN0, 13 PCLKIN, 14 P7, 15 P6, 16 P5, 17 SCL/P4, 18 SDA/P3, 19 A2/P2, 20 A1/P1, 21 A0/P0, 22 R/~{W}, 23 A/~{D}, 24 ~{CS}, 25 HOSTIF-MODE, 26 VDD (power), 27 GND (power), 28 S0, 29 S1, 30 FL0, 31 FL1, 32 FL2, 33 FL3, 34 FL4, 35 F-R/~{W}, 36 FLAG-MAP, 37 DOUT0, 38 DOUT1, 39 DOUT2, 40 GND (power), 41 VDD (power), 42 DOUT3, 43 DOUT4, 44 DOUT5, 45 DOUT6, 46 DOUT7, 47 DOUT8, 48 DOUT9, 49 V, 50 H, 51 F0, 52 F1, 53 F2, 54 ~{RESET}, 55 R/~{T}, 56 GND (power), 57 VDD (power), 58 CRC-MODE, 59 VBLANKS/~{L}, 60 BYPASS-EDH, 61 LSB-TOP, 62 ~{BLANK-EN}, 63 FLYWDIS, 64 CLIP-TRS

## GS9022
designator ?
U?
footprint PLCC28
pins: 1 VCC (power), 2 VCC (power), 3 PD0, 4 PD1, 5 PD2, 6 PD3, 7 PD4, 8 PD5, 9 PD6, 10 PD7, 11 PD8, 12 PD9, 13 PCK IN, 14 LOK DET, 15 VEE (power), 16 VCC (power), 17 LF, 18 VEE (power), 19 RVCO, 20 VCC (power), 21 VEE (power), 22 SDO, 23 ~{SDO}, 24 VCCSD, 25 SYNC DET., 26 Cosc, 27 VEE (power), 28 CREG

## GS9024
designator ?
U?
pins: 1 AGC-, 2 VEE, 3 VCC (power), 4 SDI, 5 ~{SDI}, 6 VEE, 7 VCC (power), 8 OEM, 9 CD-ADJ, 10 ~{SDO}, 11 SDO, 12 SSI/~{CD}, 13 HIGH Z, 14 AGC +

## GS9025
designator U?
footprint LQFP44
pins: 1 DDI, 2 ~{DDI}, 3 VCC-75, 4 VCC (power), 5 VEE (power), 6 SDI, 7 ~{SDI}, 8 VCC (power), 9 VEE (power), 10 CD-ADJ, 11 AGC-, 12 AGC+, 13 VCC (power), 14 VEE (power), 15 LF +, 16 LFS, 17 LF -, 18 VEE (power), 19 RVCO-RIN, 20 RVCO, 21 CBG, 22 VCC (power), 23 SS2, 24 SS1, 25 SS0, 26 AUTO/~{MAN}, 27 VEE (power), 28 ~{SCO}, 29 SCO, 30 VEE (power), 31 ~{SDO}, 32 SDO, 33 VEE (power), 34 VEE (power), 35 VCC (power), 36 CLK-EN, 37 VEE (power), 38 COSC, 39 LOCK, 40 SSI/~{CD}, 41 A/~{D}, 42 SMPTE, 43 OEM, 44 VCC-75

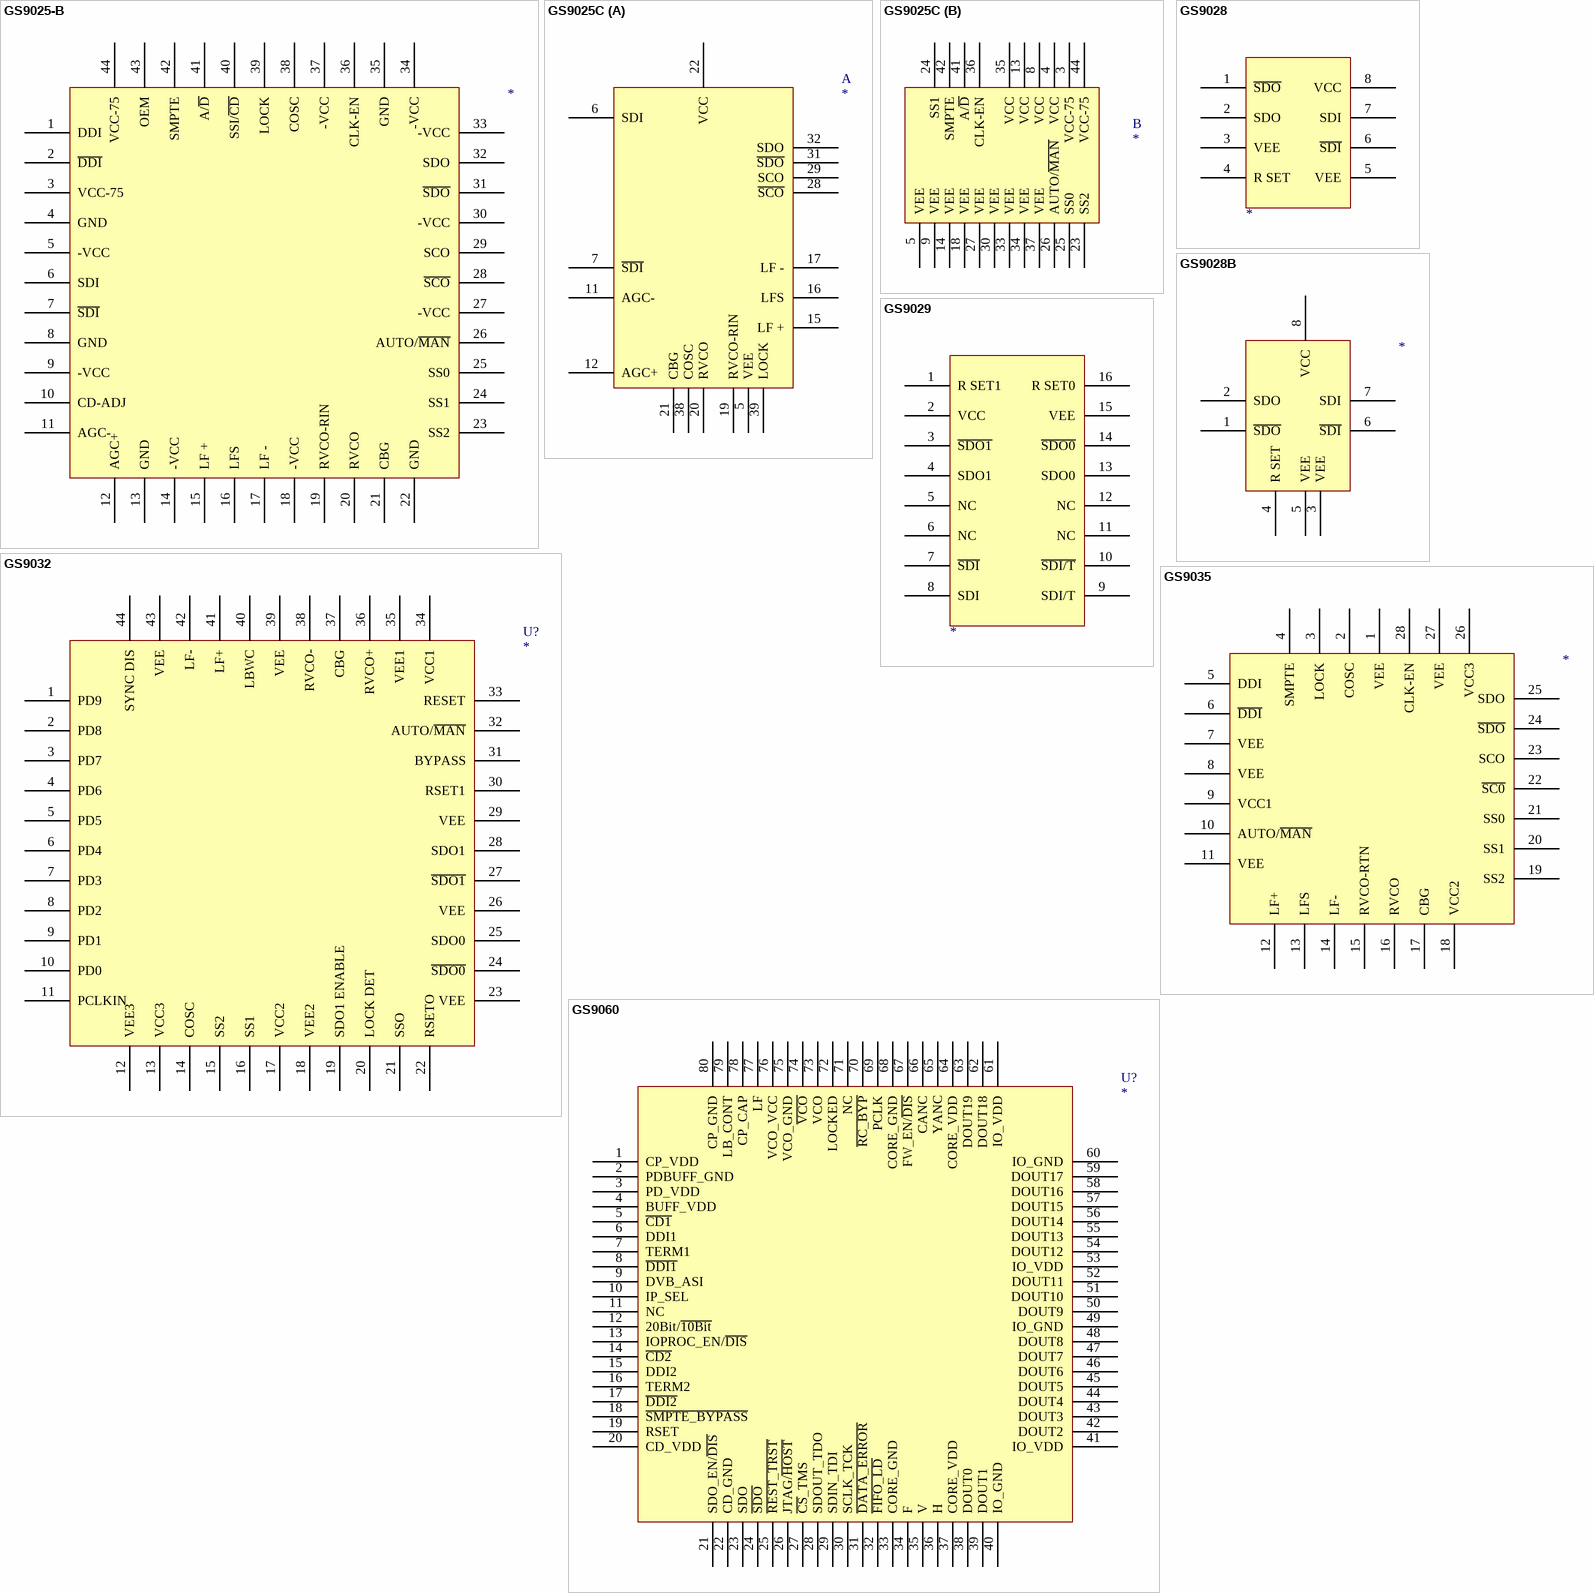
[diagram p27: symbols GS9025-B to GS9060]

## GS9025-B
designator ?
pins: 1 DDI, 2 ~{DDI}, 3 VCC-75, 4 GND (power), 5 -VCC (power), 6 SDI, 7 ~{SDI}, 8 GND (power), 9 -VCC (power), 10 CD-ADJ, 11 AGC-, 12 AGC+, 13 GND (power), 14 -VCC (power), 15 LF +, 16 LFS, 17 LF -, 18 -VCC (power), 19 RVCO-RIN, 20 RVCO, 21 CBG, 22 GND (power), 23 SS2, 24 SS1, 25 SS0, 26 AUTO/~{MAN}, 27 -VCC (power), 28 ~{SCO}, 29 SCO, 30 -VCC (power), 31 ~{SDO}, 32 SDO, 33 -VCC (power), 34 -VCC (power), 35 GND (power), 36 CLK-EN, 37 -VCC (power), 38 COSC, 39 LOCK, 40 SSI/~{CD}, 41 A/~{D}, 42 SMPTE, 43 OEM, 44 VCC-75

## GS9025C
designator ?
part A pins: 5 VEE (power), 6 SDI, 7 ~{SDI}, 11 AGC-, 12 AGC+, 15 LF +, 16 LFS, 17 LF -, 19 RVCO-RIN, 20 RVCO, 21 CBG, 22 VCC (power), 28 ~{SCO}, 29 SCO, 31 ~{SDO}, 32 SDO, 38 COSC, 39 LOCK
part B pins: 3 VCC-75, 4 VCC (power), 5 VEE (power), 8 VCC (power), 9 VEE (power), 13 VCC (power), 14 VEE (power), 18 VEE (power), 23 SS2, 24 SS1, 25 SS0, 26 AUTO/~{MAN}, 27 VEE (power), 30 VEE (power), 33 VEE (power), 34 VEE (power), 35 VCC (power), 36 CLK-EN, 37 VEE (power), 41 A/~{D}, 42 SMPTE, 44 VCC-75

## GS9028
designator ?
U?
pins: 1 ~{SDO}, 2 SDO, 3 VEE (power), 4 R SET, 5 VEE (power), 6 ~{SDI}, 7 SDI, 8 VCC (power)

## GS9028B
designator ?
U?
pins: 1 ~{SDO}, 2 SDO, 3 VEE (power), 4 R SET, 5 VEE (power), 6 ~{SDI}, 7 SDI, 8 VCC (power)

## GS9029
designator ?
U?
pins: 1 R SET1, 2 VCC (power), 3 ~{SDO1}, 4 SDO1, 5 NC, 6 NC, 7 ~{SDI}, 8 SDI, 9 SDI/T, 10 ~{SDI/T}, 11 NC, 12 NC, 13 SDO0, 14 ~{SDO0}, 15 VEE (power), 16 R SET0

## GS9032
designator U?
footprint TQFP44
pins: 1 PD9, 2 PD8, 3 PD7, 4 PD6, 5 PD5, 6 PD4, 7 PD3, 8 PD2, 9 PD1, 10 PD0, 11 PCLKIN, 12 VEE3, 13 VCC3, 14 COSC, 15 SS2, 16 SS1, 17 VCC2 (power), 18 VEE2, 19 SDO1 ENABLE, 20 LOCK DET, 21 SSO, 22 RSETO, 23 VEE, 24 ~{SDO0}, 25 SDO0, 26 VEE, 27 ~{SDO1}, 28 SDO1, 29 VEE, 30 RSET1, 31 BYPASS, 32 AUTO/~{MAN}, 33 RESET, 34 VCC1 (power), 35 VEE1, 36 RVCO+, 37 CBG, 38 RVCO-, 39 VEE, 40 LBWC, 41 LF+, 42 LF-, 43 VEE, 44 SYNC DIS

## GS9035
designator ?
U?
pins: 1 VEE (power), 2 COSC, 3 LOCK, 4 SMPTE, 5 DDI, 6 ~{DDI}, 7 VEE (power), 8 VEE (power), 9 VCC1, 10 AUTO/~{MAN}, 11 VEE (power), 12 LF+, 13 LFS, 14 LF-, 15 RVCO-RTN, 16 RVCO, 17 CBG, 18 VCC2 (power), 19 SS2, 20 SS1, 21 SS0, 22 ~{SC0}, 23 SCO, 24 ~{SDO}, 25 SDO, 26 VCC3, 27 VEE (power), 28 CLK-EN

## GS9060
designator U?
footprint LQFP80B
pins: 1 CP_VDD, 2 PDBUFF_GND, 3 PD_VDD, 4 BUFF_VDD, 5 ~{CD1}, 6 DDI1, 7 TERM1, 8 ~{DDI1}, 9 DVB_ASI, 10 IP_SEL, 11 NC, 12 20Bit/~{10Bit}, 13 IOPROC_EN/~{DIS}, 14 ~{CD2}, 15 DDI2, 16 TERM2, 17 ~{DDI2}, 18 ~{SMPTE_BYPASS}, 19 RSET, 20 CD_VDD, 21 SDO_EN/~{DIS}, 22 CD_GND, 23 SDO, 24 ~{SDO}, 25 ~{REST_TRST}, 26 JTAG/~{HOST}, 27 ~{CS}_TMS, 28 SDOUT_TDO, 29 SDIN_TDI, 30 SCLK_TCK, 31 ~{DATA_ERROR}, 32 ~{FIFO_LD}, 33 CORE_GND, 34 F, 35 V, 36 H, 37 CORE_VDD, 38 DOUT0, 39 DOUT1, 40 IO_GND, 41 IO_VDD, 42 DOUT2, 43 DOUT3, 44 DOUT4, 45 DOUT5, 46 DOUT6, 47 DOUT7, 48 DOUT8, 49 IO_GND, 50 DOUT9, 51 DOUT10, 52 DOUT11, 53 IO_VDD, 54 DOUT12, 55 DOUT13, 56 DOUT14, 57 DOUT15, 58 DOUT16, 59 DOUT17, 60 IO_GND, 61 IO_VDD, 62 DOUT18, 63 DOUT19, 64 CORE_VDD, 65 YANC, 66 CANC, 67 FW_EN/~{DIS}, 68 CORE_GND, 69 PCLK, 70 ~{RC_BYP}, 71 NC, 72 LOCKED, 73 VCO, 74 ~{VCO}, 75 VCO_GND, 76 VCO_VCC, 77 LF, 78 CP_CAP, 79 LB_CONT, 80 CP_GND

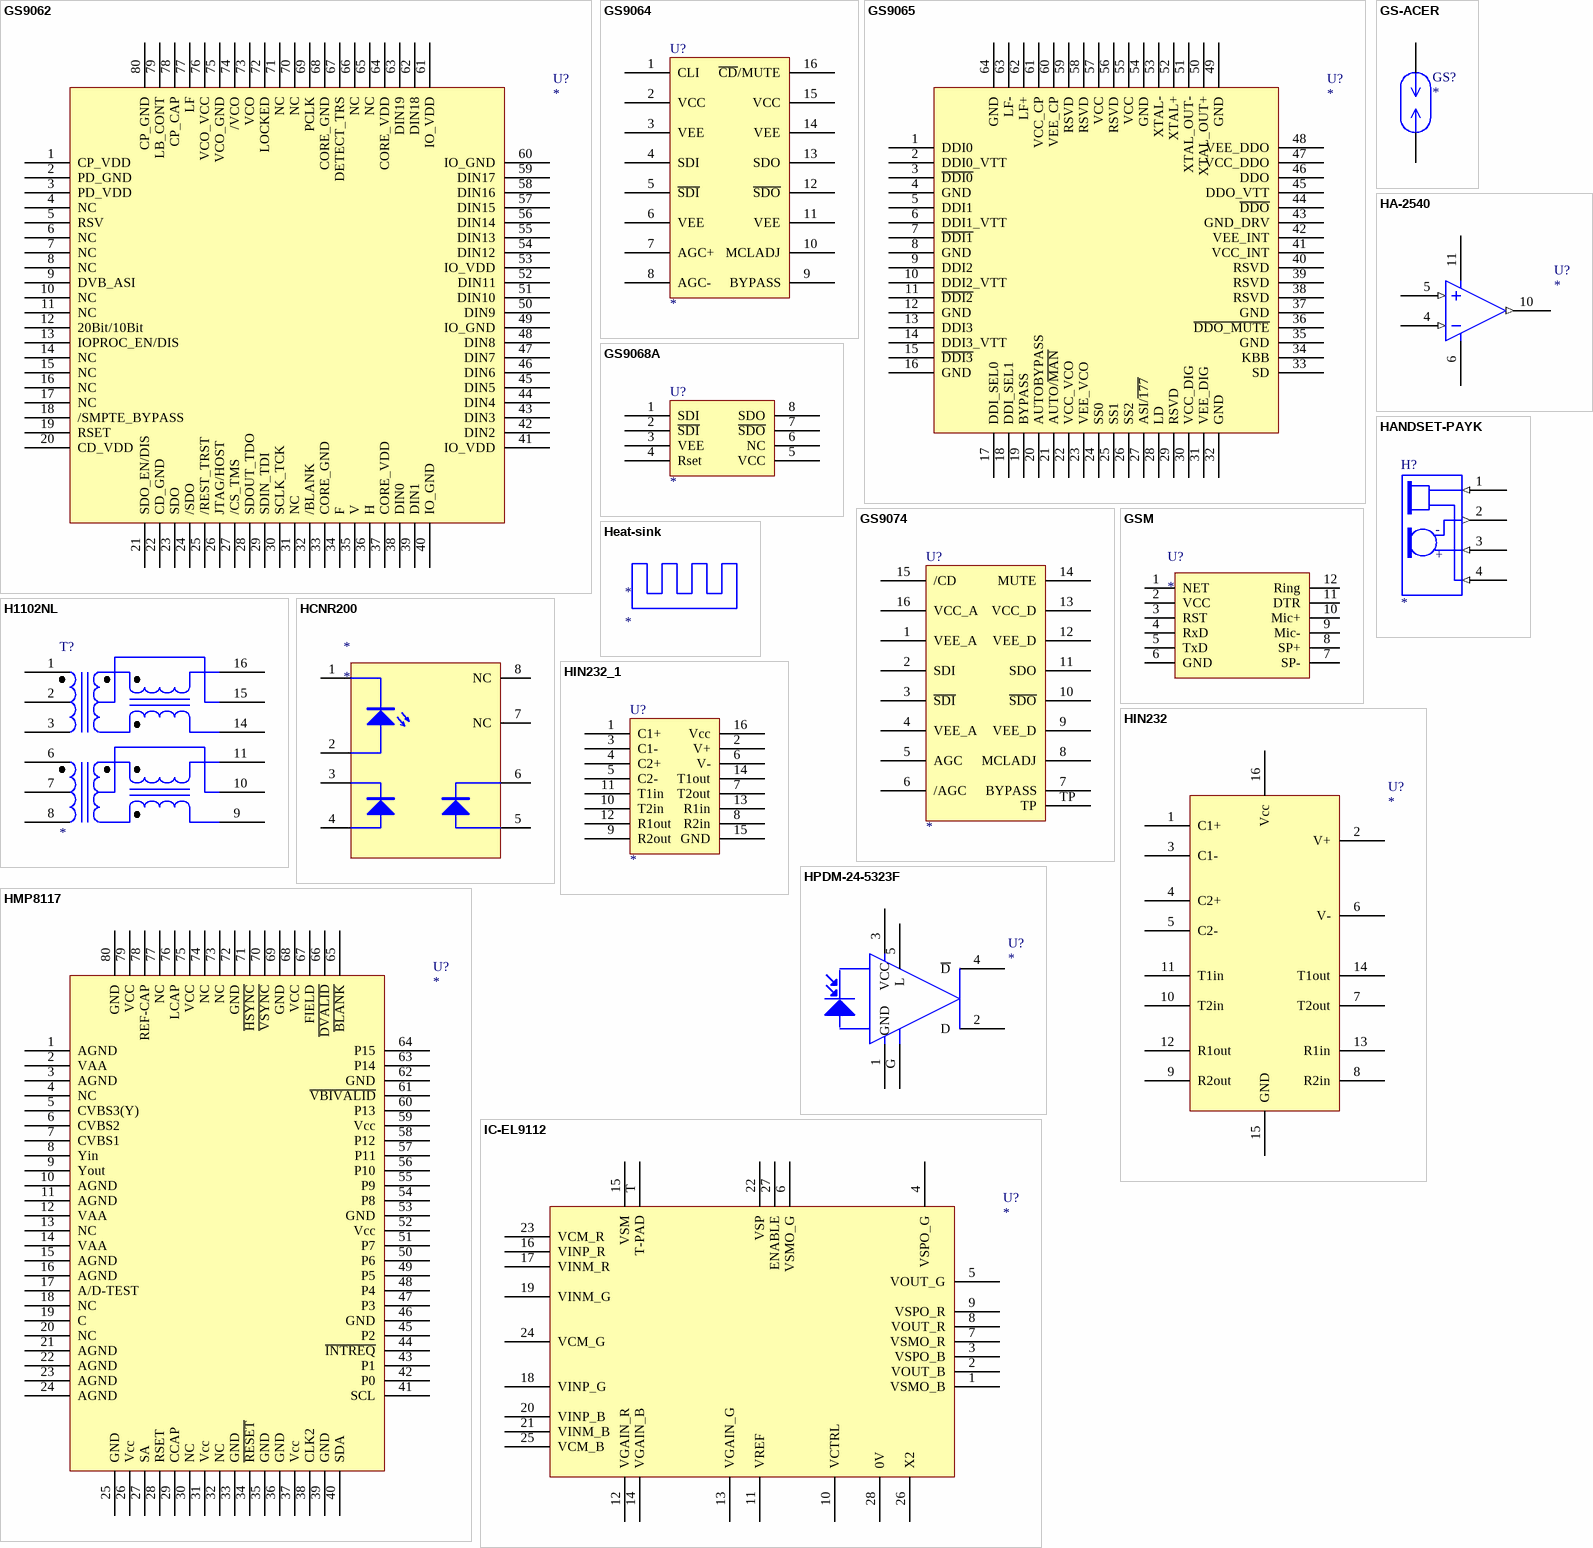
[diagram p28: symbols GS9062 to IC-EL9112]

## GS9062
designator U?
footprint LQFP80B
pins: 1 CP_VDD, 2 PD_GND, 3 PD_VDD, 4 NC, 5 RSV, 6 NC, 7 NC, 8 NC, 9 DVB_ASI, 10 NC, 11 NC, 12 20Bit/10Bit, 13 IOPROC_EN/DIS, 14 NC, 15 NC, 16 NC, 17 NC, 18 /SMPTE_BYPASS, 19 RSET, 20 CD_VDD, 21 SDO_EN/DIS, 22 CD_GND, 23 SDO, 24 /SDO, 25 /REST_TRST, 26 JTAG/HOST, 27 /CS_TMS, 28 SDOUT_TDO, 29 SDIN_TDI, 30 SCLK_TCK, 31 NC, 32 /BLANK, 33 CORE_GND, 34 F, 35 V, 36 H, 37 CORE_VDD, 38 DIN0, 39 DIN1, 40 IO_GND, 41 IO_VDD, 42 DIN2, 43 DIN3, 44 DIN4, 45 DIN5, 46 DIN6, 47 DIN7, 48 DIN8, 49 IO_GND, 50 DIN9, 51 DIN10, 52 DIN11, 53 IO_VDD, 54 DIN12, 55 DIN13, 56 DIN14, 57 DIN15, 58 DIN16, 59 DIN17, 60 IO_GND, 61 IO_VDD, 62 DIN18, 63 DIN19, 64 CORE_VDD, 65 NC, 66 NC, 67 DETECT_TRS, 68 CORE_GND, 69 PCLK, 70 NC, 71 NC, 72 LOCKED, 73 VCO, 74 /VCO, 75 VCO_GND, 76 VCO_VCC, 77 LF, 78 CP_CAP, 79 LB_CONT, 80 CP_GND

## GS9064
designator U?
footprint SO-16
pins: 1 CLI, 2 VCC, 3 VEE, 4 SDI, 5 ~{SDI}, 6 VEE, 7 AGC+, 8 AGC-, 9 BYPASS, 10 MCLADJ, 11 VEE, 12 ~{SDO}, 13 SDO, 14 VEE, 15 VCC, 16 ~{CD}/MUTE

## GS9065
designator U?
footprint ST-64B
pins: 1 DDI0, 2 DDI0_VTT, 3 ~{DDI0}, 4 GND, 5 DDI1, 6 DDI1_VTT, 7 ~{DDI1}, 8 GND, 9 DDI2, 10 DDI2_VTT, 11 ~{DDI2}, 12 GND, 13 DDI3, 14 DDI3_VTT, 15 ~{DDI3}, 16 GND, 17 DDI_SEL0, 18 DDI_SEL1, 19 BYPASS, 20 AUTOBYPASS, 21 AUTO/~{MAN}, 22 VCC_VCO, 23 VEE_VCO, 24 SS0, 25 SS1, 26 SS2, 27 ASI/~{177}, 28 LD, 29 RSVD, 30 VCC_DIG, 31 VEE_DIG, 32 GND, 33 SD, 34 KBB, 35 GND, 36 ~{DDO_MUTE}, 37 GND, 38 RSVD, 39 RSVD, 40 RSVD, 41 VCC_INT, 42 VEE_INT, 43 GND_DRV, 44 ~{DDO}, 45 DDO_VTT, 46 DDO, 47 VCC_DDO, 48 VEE_DDO, 49 GND, 50 XTAL_OUT+, 51 XTAL_OUT-, 52 XTAL+, 53 XTAL-, 54 GND, 55 VCC, 56 RSVD, 57 VCC, 58 RSVD, 59 RSVD, 60 VEE_CP, 61 VCC_CP, 62 LF+, 63 LF-, 64 GND

## GS9068A
designator U?
footprint SO-8
pins: 1 SDI, 2 ~{SDI}, 3 VEE, 4 Rset, 5 VCC, 6 NC, 7 ~{SDO}, 8 SDO

## GS9074
designator U?
footprint QFN16
pins: 1 VEE_A, 2 SDI, 3 ~{SDI}, 4 VEE_A, 5 AGC, 6 /AGC, 7 BYPASS, 8 MCLADJ, 9 VEE_D, 10 ~{SDO}, 11 SDO, 12 VEE_D, 13 VCC_D, 14 MUTE, 15 /CD, 16 VCC_A, TP

## GS-ACER
designator GS?
pins: 1, 2

## GSM
designator U?
pins: 1 NET, 2 VCC, 3 RST, 4 RxD, 5 TxD, 6 GND, 7 SP-, 8 SP+, 9 Mic-, 10 Mic+, 11 DTR, 12 Ring

## H1102NL
designator T?
footprint 10-100TRANS
pins: 1, 2, 3, 6, 7, 8, 9, 10, 11, 14, 15, 16

## HA-2540
designator U?
pins: 4 -IN (in), 5 +IN (in), 6 V-, 10 OUT (out), 11 V+

## HANDSET-PAYK
designator H?
pins: 1 SPK1 (in), 2 -MIC (out), 3 +MIC (in), 4 SPK2 (in)
text: -; +

## HCNR200
designator *
footprint so-8-big (Footprint not found)
pins: 1, 2, 3, 4, 5, 6, 7 NC, 8 NC

## Heat-sink
designator *

## HIN232
designator U?
footprint DIP16
pins: 1 C1+, 2 V+, 3 C1-, 4 C2+, 5 C2-, 6 V-, 7 T2out, 8 R2in, 9 R2out, 10 T2in, 11 T1in, 12 R1out, 13 R1in, 14 T1out, 15 GND, 16 Vcc

## HIN232_1
designator U?
footprint DIP16
pins: 1 C1+, 2 V+, 3 C1-, 4 C2+, 5 C2-, 6 V-, 7 T2out, 8 R2in, 9 R2out, 10 T2in, 11 T1in, 12 R1out, 13 R1in, 14 T1out, 15 GND, 16 Vcc

## HMP8117
designator U?
footprint MQFP80
pins: 1 AGND, 2 VAA, 3 AGND, 4 NC, 5 CVBS3(Y), 6 CVBS2, 7 CVBS1, 8 Yin, 9 Yout, 10 AGND, 11 AGND, 12 VAA, 13 NC, 14 VAA, 15 AGND, 16 AGND, 17 A/D-TEST, 18 NC, 19 C, 20 NC, 21 AGND, 22 AGND, 23 AGND, 24 AGND, 25 GND, 26 Vcc, 27 SA, 28 RSET, 29 CCAP, 30 NC, 31 Vcc, 32 NC, 33 GND, 34 ~{RESET}, 35 GND, 36 GND, 37 Vcc, 38 CLK2, 39 GND, 40 SDA, 41 SCL, 42 P0, 43 P1, 44 ~{INTREQ}, 45 P2, 46 GND, 47 P3, 48 P4, 49 P5, 50 P6, 51 P7, 52 Vcc, 53 GND, 54 P8, 55 P9, 56 P10, 57 P11, 58 P12, 59 Vcc, 60 P13, 61 ~{VBIVALID}, 62 GND, 63 P14, 64 P15, 65 ~{BLANK}, 66 ~{DVALID}, 67 FIELD, 68 VCC, 69 GND, 70 ~{VSYNC}, 71 ~{HSYNC}, 72 GND, 73 NC, 74 NC, 75 VCC, 76 LCAP, 77 NC, 78 REF-CAP, 79 VCC, 80 GND

## HPDM-24-5323F
designator U?
footprint LDHP3
pins: 1 GND, 2 D, 3 VCC, 4 ~{D}, 5 L, G

## IC-EL9112
designator U?
footprint QFN28
pins: 1 VSMO_B, 2 VOUT_B, 3 VSPO_B, 4 VSPO_G, 5 VOUT_G, 6 VSMO_G, 7 VSMO_R, 8 VOUT_R, 9 VSPO_R, 10 VCTRL, 11 VREF, 12 VGAIN_R, 13 VGAIN_G, 14 VGAIN_B, 15 VSM, 16 VINP_R, 17 VINM_R, 18 VINP_G, 19 VINM_G, 20 VINP_B, 21 VINM_B, 22 VSP, 23 VCM_R, 24 VCM_G, 25 VCM_B, 26 X2, 27 ENABLE, 28 0V, T T-PAD

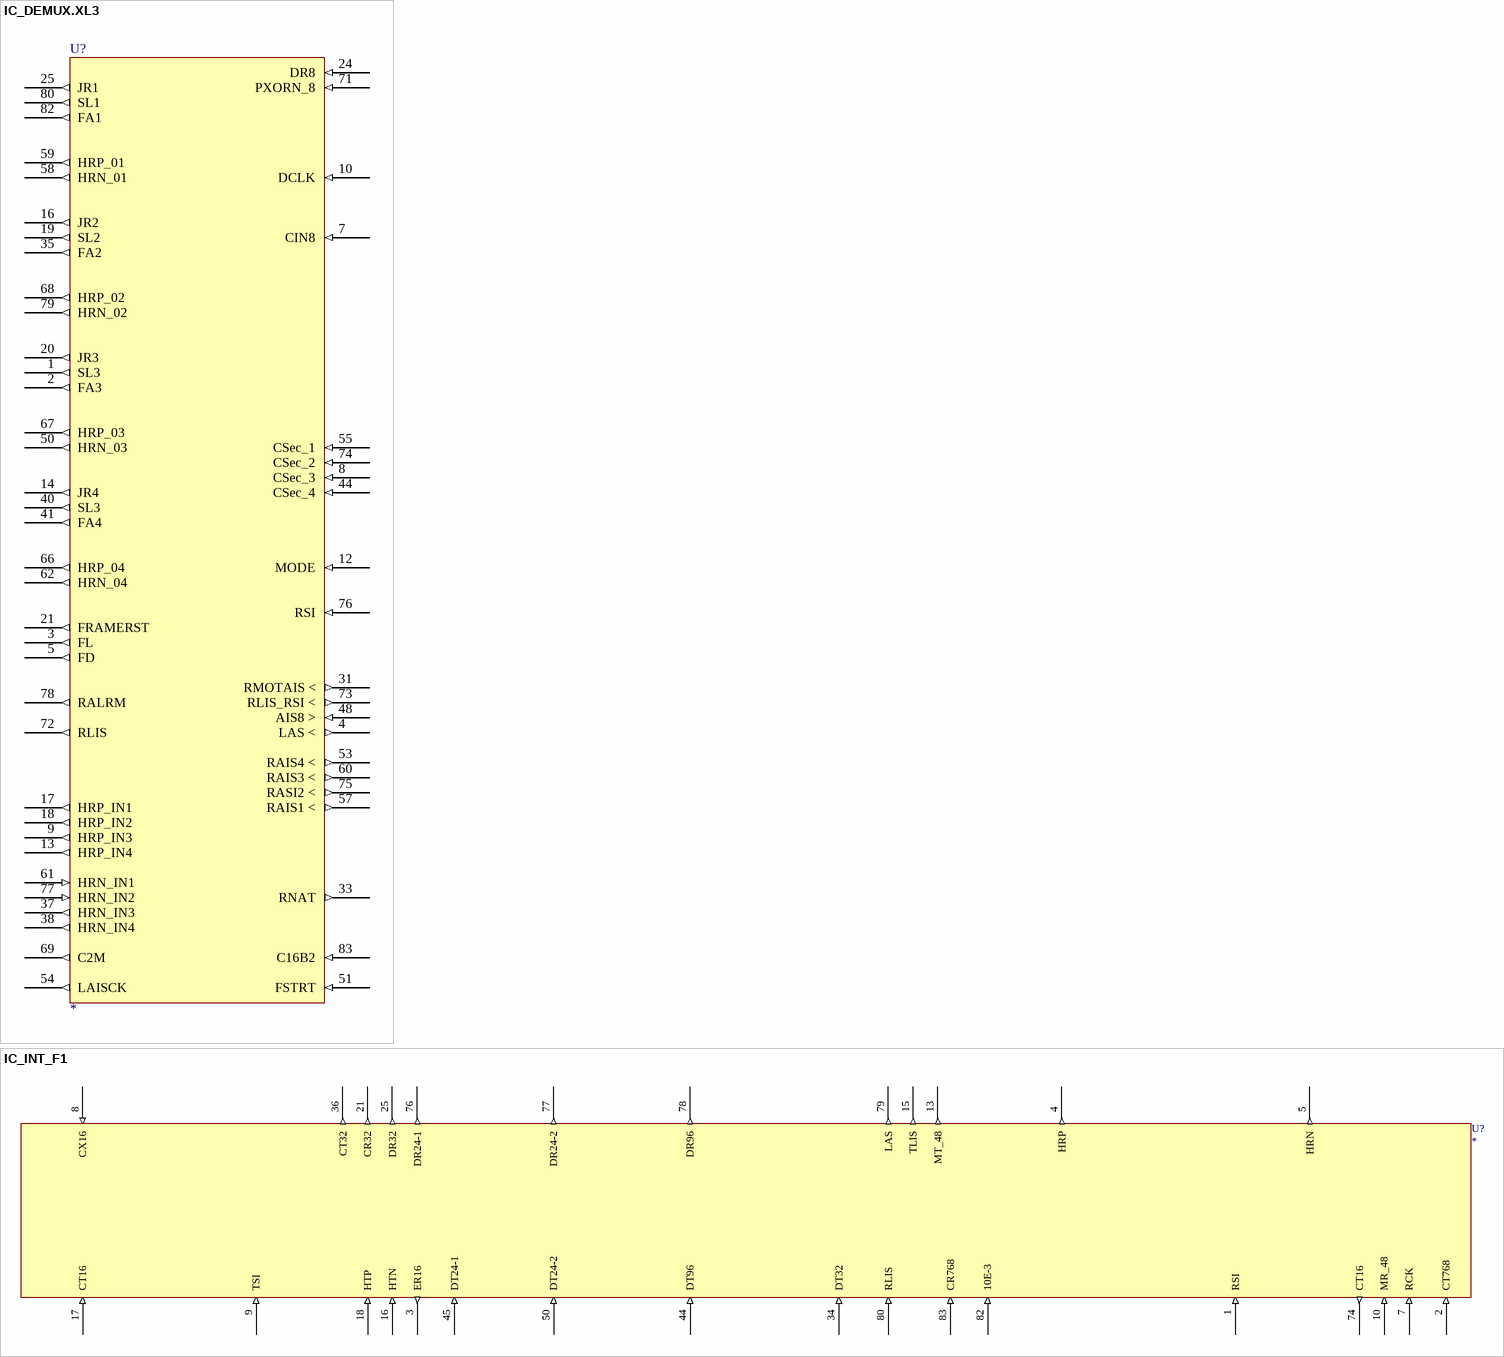
[diagram p29: symbols IC_DEMUX.XL3 to IC_INT_F1]

## IC_DEMUX.XL3
designator U?
pins: 1 SL3 (out), 2 FA3 (out), 3 FL (out), 4 LAS < (out), 5 FD (out), 6 GND (power) hidden to GND, 7 CIN8 (in), 8 CSec_3 (in), 9 HRP_IN3 (out), 10 DCLK (in), 12 MODE (in), 13 HRP_IN4 (out), 14 JR4 (out), 16 JR2 (out), 17 HRP_IN1 (out), 18 HRP_IN2 (out), 19 SL2 (out), 20 JR3 (out), 21 FRAMERST (out), 22 VCC (power) hidden to VCC, 24 DR8 (in), 25 JR1 (out), 28 GND (power) hidden to GND, 31 RMOTAIS < (out), 33 RNAT (out), 35 FA2 (out), 37 HRN_IN3 (out), 38 HRN_IN4 (out), 40 SL3 (out), 41 FA4 (out), 43 VCC (power) hidden to VCC, 44 CSec_4 (in), 48 AIS8 > (in), 49 GND (power) hidden to GND, 50 HRN_03 (out), 51 FSTRT (in), 53 RAIS4 < (out), 54 LAISCK (out), 55 CSec_1 (in), 57 RAIS1 < (out), 58 HRN_01 (out), 59 HRP_01 (out), 60 RAIS3 < (out), 61 HRN_IN1 (in), 62 HRN_04 (out), 65 VCC (power) hidden to VCC, 66 HRP_04 (out), 67 HRP_03 (out), 68 HRP_02 (out), 69 C2M (out), 70 GND (power) hidden to GND, 71 PXORN_8 (in), 72 RLIS (out), 73 RLIS_RSI < (out), 74 CSec_2 (in), 75 RASI2 < (out), 76 RSI (in), 77 HRN_IN2 (in), 78 RALRM (out), 79 HRN_02 (out), 80 SL1 (out), 82 FA1 (out), 83 C16B2 (in), 84 VCC (power) hidden to VCC

## IC_INT_F1
designator U?
pins: 1 RSI (in), 2 CT768 (in), 3 ER16 (out), 4 HRP (out), 5 HRN (out), 7 RCK (in), 8 CX16 (in), 9 TSI (in), 10 MR_48 (in), 13 MT_48 (out), 15 TLIS (out), 16 HTN (in), 17 CT16 (in), 18 HTP (in), 21 CR32 (out), 25 DR32 (out), 34 DT32 (in), 36 CT32 (out), 44 DT96 (in), 45 DT24-1 (in), 50 DT24-2 (in), 74 CT16 (out), 76 DR24-1 (out), 77 DR24-2 (out), 78 DR96 (out), 79 LAS (out), 80 RLIS (in), 82 10E-3 (in), 83 CR768 (in)

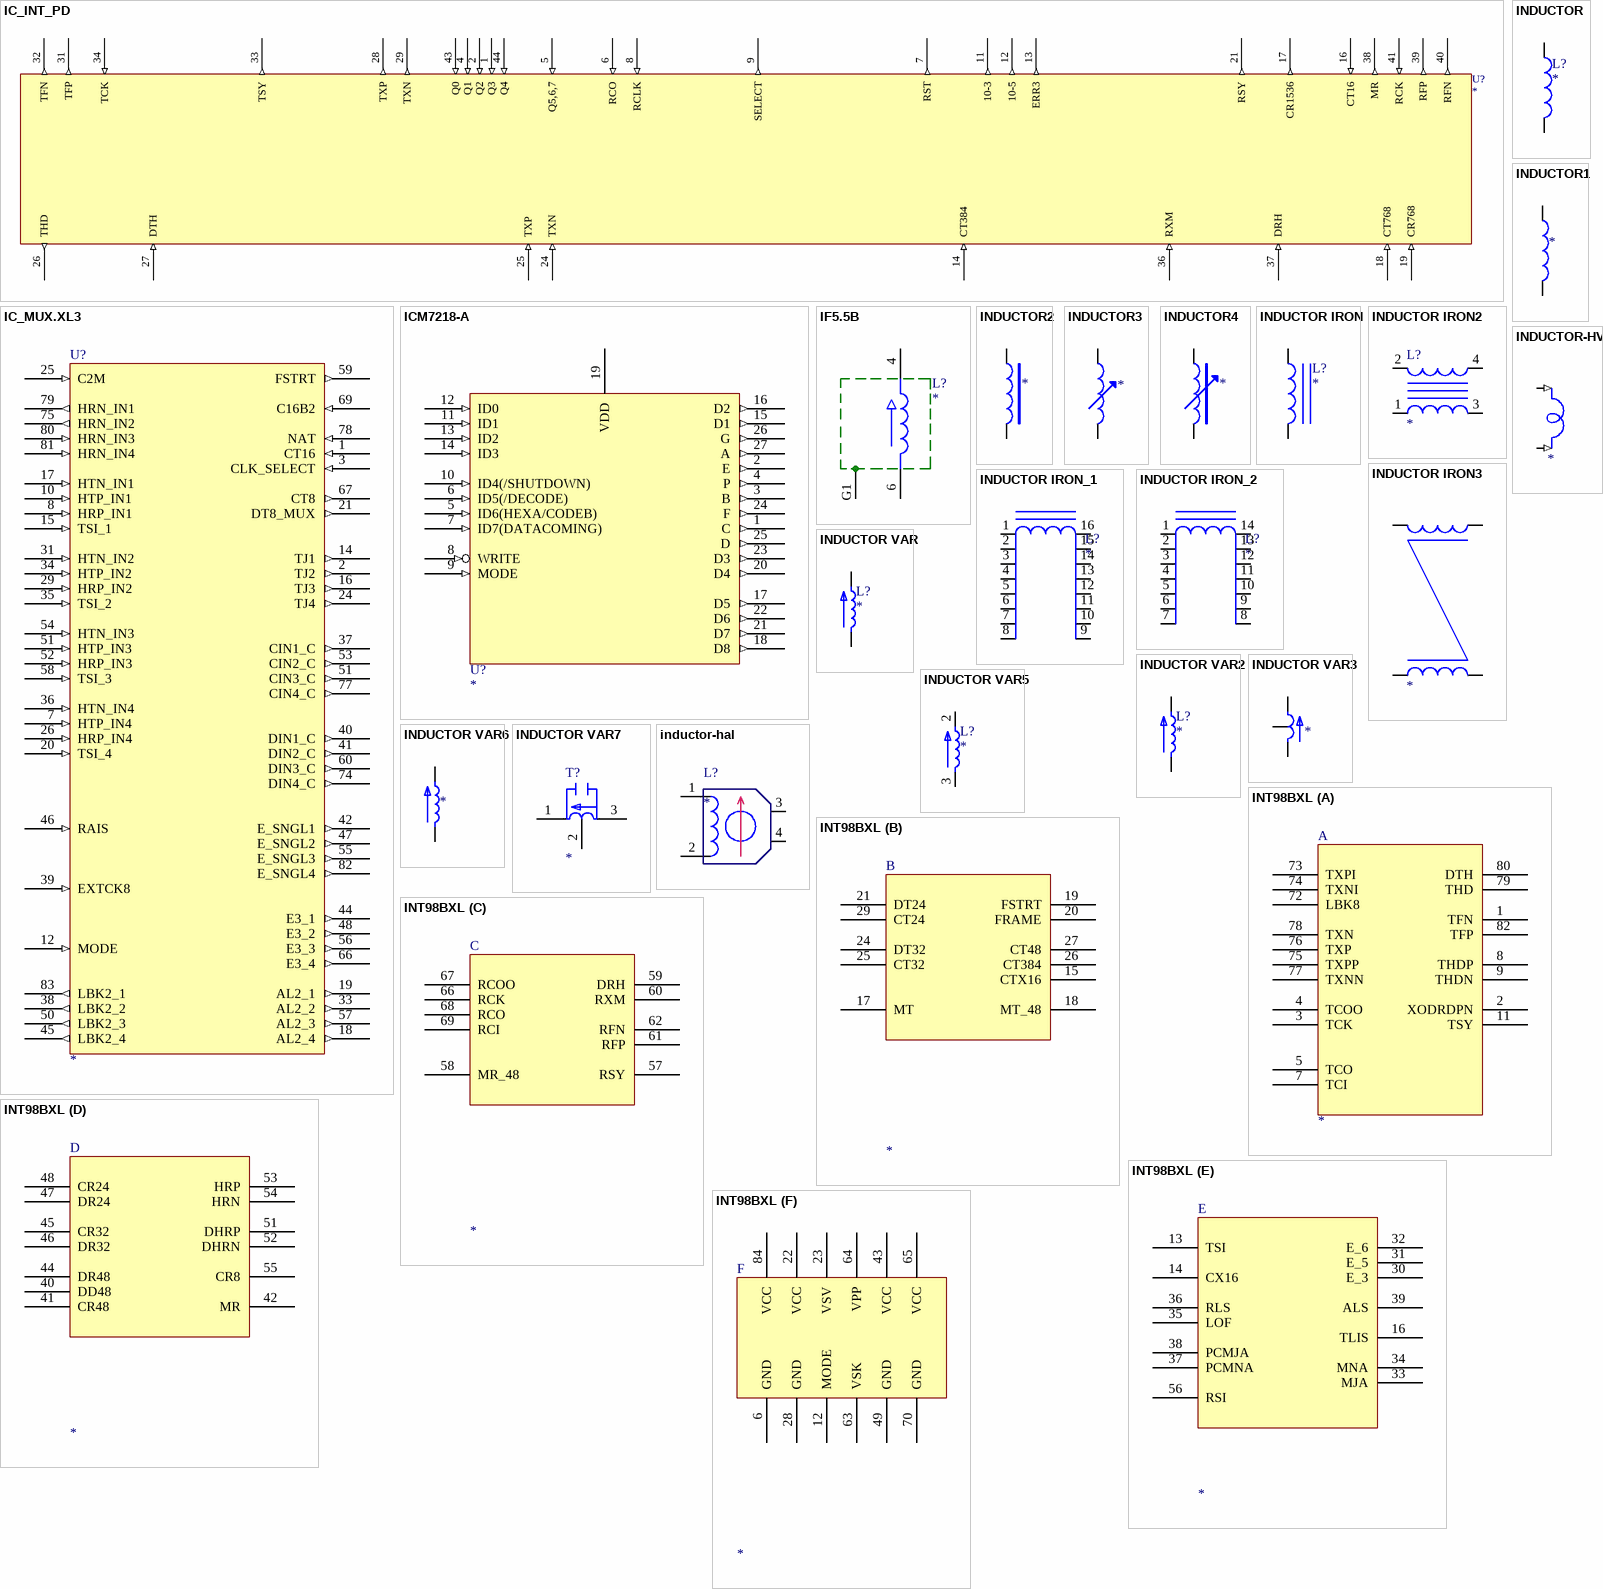
[diagram p30: symbols IC_INT_PD to INT98BXL]

## IC_INT_PD
designator U?
pins: 1 Q3 (in), 2 Q2 (in), 4 Q1 (in), 5 Q5,6,7 (in), 6 RCO (in), 7 RST (out), 8 RCLK (in), 9 SELECT (out), 11 10-3 (out), 12 10-5 (out), 13 ERR3 (out), 14 CT384 (in), 16 CT16 (in), 17 CR1536 (out), 18 CT768 (in), 19 CR768 (in), 21 RSY (out), 24 TXN (in), 25 TXP (in), 26 THD (out), 27 DTH (in), 28 TXP (out), 29 TXN (out), 31 TFP (out), 32 TFN (out), 33 TSY (out), 34 TCK (in), 36 RXM (in), 37 DRH (in), 38 MR (out), 39 RFP (out), 40 RFN (out), 41 RCK (in), 43 Q0 (in), 44 Q4 (in)

## IC_MUX.XL3
designator U?
pins: 1 CT16 (in), 2 TJ2 (out), 3 CLK_SELECT (in), 6 GND (power) hidden to GND, 7 HTP_IN4 (in), 8 HRP_IN1 (in), 10 HTP_IN1 (in), 12 MODE (in), 14 TJ1 (out), 15 TSI_1 (in), 16 TJ3 (out), 17 HTN_IN1 (in), 18 AL2_4 (out), 19 AL2_1 (out), 20 TSI_4 (in), 21 DT8_MUX (out), 22 VCC (power) hidden to VCC, 24 TJ4 (out), 25 C2M (in), 26 HRP_IN4 (in), 28 GND (power) hidden to GND, 29 HRP_IN2 (in), 31 HTN_IN2 (in), 33 AL2_2 (out), 34 HTP_IN2 (in), 35 TSI_2 (in), 36 HTN_IN4 (in), 37 CIN1_C (out), 38 LBK2_2 (out), 39 EXTCK8 (in), 40 DIN1_C (out), 41 DIN2_C (out), 42 E_SNGL1 (out), 43 VCC (power) hidden to VCC, 44 E3_1 (out), 45 LBK2_4 (out), 46 RAIS (in), 47 E_SNGL2 (out), 48 E3_2 (out), 49 GND (power) hidden to GND, 50 LBK2_3 (out), 51 HTP_IN3 (in), 51 CIN3_C (out), 52 HRP_IN3 (in), 53 CIN2_C (out), 54 HTN_IN3 (in), 55 E_SNGL3 (out), 56 E3_3 (out), 57 AL2_3 (out), 58 TSI_3 (in), 59 FSTRT (out), 60 DIN3_C (out), 65 VCC (power) hidden to VCC, 66 E3_4 (out), 67 CT8 (out), 69 C16B2 (in), 70 GND (power) hidden to GND, 74 DIN4_C (out), 75 HRN_IN2 (out), 77 CIN4_C (out), 78 NAT (in), 79 HRN_IN1 (out), 80 HRN_IN3 (in), 81 HRN_IN4 (in), 82 E_SNGL4 (out), 83 LBK2_1 (out), 84 VCC (power) hidden to VCC